# Altium schematic symbol library Master.SchLib: 262 symbols (part 1 of 2)
Pins are listed as number, name and electrical type; pins without a type are passive.

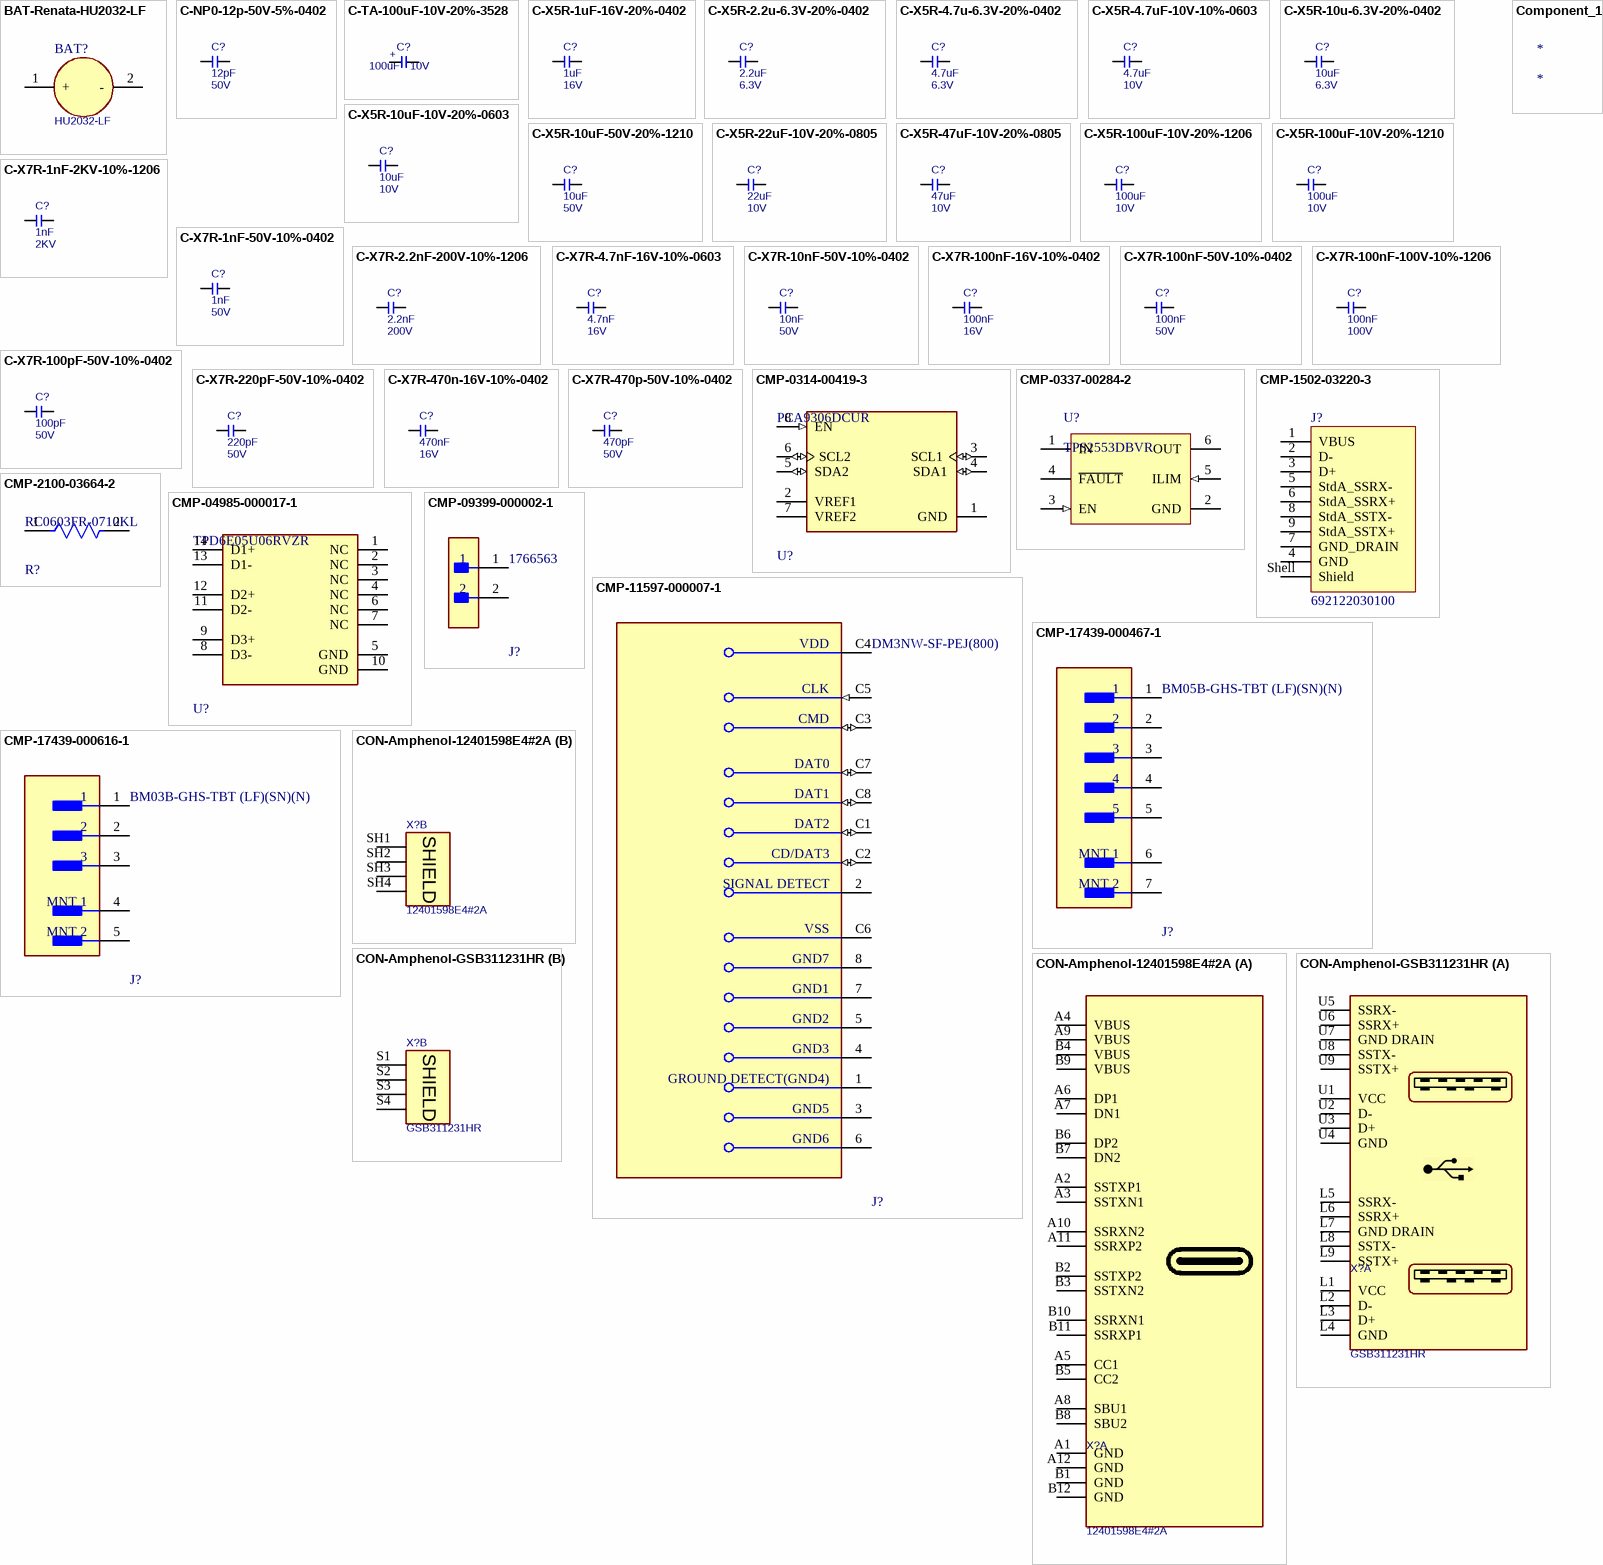
[diagram p0: symbols BAT-Renata-HU2032-LF to CON-Amphenol-GSB311231HR]

## BAT-Renata-HU2032-LF
designator BAT?, comment HU2032-LF
C2032 Battery Holder; Manufacturer Name: Renata; Manufacturer Part No.: HU2032-LF
footprint T_Renata_HU2032-LF (Battery Holder)
pins: 1 +, 2 -

## C-NP0-12p-50V-5%-0402
designator C?, comment Rating: 50V  (hidden comment: 12pF)
Capacitor Ceramic NP0  12pF 50V 5% 0402; Tolerance: 5%; Type: NP0; Value: 12pF
footprint CAPC1005X60N
pins: 1, 2

## C-TA-100uF-10V-20%-3528
designator C?, comment Rating: 10V  (hidden comment: 100uF)
Capacitor TA 100uF 10V 20% 3528; Tolerance: 20%; Type: TA; Value: 100uF
footprint CAPMP3528X210N
pins: 1, 2
text: +

## C-X5R-1uF-16V-20%-0402
designator C?, comment Rating: 16V  (hidden comment: 1uF)
Capacitor Ceramic X5R 1uF 16V 20% 0402; Tolerance: 20%; Type: X5R; Value: 1uF
footprint CAPC1005X60N
pins: 1, 2

## C-X5R-2.2u-6.3V-20%-0402
designator C?, comment Rating: 6.3V  (hidden comment: 2.2uF)
Capacitor Ceramic X5R 2.2uF 6.3V 20% 0402; Tolerance: 20%; Type: X5R; Value: 2.2uF
footprint CAPC1005X60N
pins: 1, 2

## C-X5R-4.7u-6.3V-20%-0402
designator C?, comment Rating: 6.3V  (hidden comment: 4.7uF)
Capacitor Ceramic X5R 4.7uF 6.3V 20% 0402; Tolerance: 20%; Type: X5R; Value: 4.7uF
footprint CAPC1005X60N
pins: 1, 2

## C-X5R-4.7uF-10V-10%-0603
designator C?, comment Rating: 10V  (hidden comment: 4.7uF)
Capacitor Ceramic X5R 4.7uF 10V 10% 0603; Tolerance: 10%; Type: X5R; Value: 4.7uF
footprint T_CAPC0603X33N
pins: 1, 2

## C-X5R-10u-6.3V-20%-0402
designator C?, comment Rating: 6.3V  (hidden comment: 10uF)
Capacitor Ceramic X5R 10uF 6.3V 20% 0402; Tolerance: 20%; Type: X5R; Value: 10uF
footprint CAPC1005X60N (Ceramic Capacitor 0402 (1005 metric), max height 0.5mm)
pins: 1, 2

## C-X5R-10uF-10V-20%-0603
designator C?, comment Rating: 10V  (hidden comment: 10uF)
Capacitor Ceramic X5R 10uF 10V 20% 0603; Tolerance: 20%; Type: X5R; Value: 10uF
footprint T_CAPC0603X33N
pins: 1, 2

## C-X5R-10uF-50V-20%-1210
designator C?, comment Rating: 50V  (hidden comment: 10uF)
Capacitor Ceramic X5R 10uF 50V 20% 1210; Tolerance: 20%; Type: X5R; Value: 10uF
footprint CAPC3225X160N
pins: 1, 2

## C-X5R-22uF-10V-20%-0805
designator C?, comment Rating: 10V  (hidden comment: 22uF)
Capacitor Ceramic X5R 22uF 10V 20% 0805; Tolerance: 20%; Type: X5R; Value: 22uF
footprint T_CAPC0805X125N
pins: 1, 2

## C-X5R-47uF-10V-20%-0805
designator C?, comment Rating: 10V  (hidden comment: 47uF)
Capacitor Ceramic X5R 47uF 10V 20% 0805; Tolerance: 20%; Type: X5R; Value: 47uF
footprint T_CAPC0805X125N
pins: 1, 2

## C-X5R-100uF-10V-20%-1206
designator C?, comment Rating: 10V  (hidden comment: 100uF)
Capacitor Ceramic X5R 100uF 10V 20% 1206; Tolerance: 20%; Type: X5R; Value: 100uF
footprint T_CAPC1206X60N
pins: 1, 2

## C-X5R-100uF-10V-20%-1210
designator C?, comment Rating: 10V  (hidden comment: 100uF)
Capacitor Ceramic X5R 100uF 10V 20% 1210; Tolerance: 20%; Type: X5R; Value: 100uF
footprint CAPC3225X160N
pins: 1, 2

## C-X7R-1nF-2KV-10%-1206
designator C?, comment Rating: 2KV  (hidden comment: 1nF)
Capacitor Ceramic X7R 1nF 2KV 10% 1206; Tolerance: 10%; Type: X7R; Value: 1nF
footprint T_CAPC1206X180N (Ceramic Capacitor 1206 (3216 metric), max height 1.8mm)
pins: 1, 2

## C-X7R-1nF-50V-10%-0402
designator C?, comment Rating: 50V  (hidden comment: 1nF)
Capacitor Ceramic X7R 1nF 50V 10% 0402; Tolerance: 10%; Type: X7R; Value: 1nF
footprint CAPC1005X60N
pins: 1, 2

## C-X7R-2.2nF-200V-10%-1206
designator C?, comment Rating: 200V  (hidden comment: 2.2nF)
Capacitor Ceramic X7R 2.2nF 200V 10% 1206; Tolerance: 10%; Type: X7R; Value: 2.2nF
footprint T_CAPC1206X180N (Ceramic Capacitor 1206 (3216 metric), max height 1.8mm)
pins: 1, 2

## C-X7R-4.7nF-16V-10%-0603
designator C?, comment Rating: 16V  (hidden comment: 4.7nF)
Capacitor Ceramic X7R 4.7nF 16V 10% 0603; Type: X7R; Tolerance: 10%; Value: 4.7nF
footprint T_CAPC0603X33N
pins: 1, 2

## C-X7R-10nF-50V-10%-0402
designator C?, comment Rating: 50V  (hidden comment: 10nF)
Capacitor Ceramic X7R 10nF 50V 10% 0402; Tolerance: 10%; Type: X7R; Value: 10nF
footprint CAPC1005X60N
pins: 1, 2

## C-X7R-100nF-16V-10%-0402
designator C?, comment Rating: 16V  (hidden comment: 100nF)
Capacitor Ceramic X7R 100nF 16V 10% 0402; Tolerance: 10%; Type: X7R; Value: 100nF
footprint CAPC1005X60N
pins: 1, 2

## C-X7R-100nF-50V-10%-0402
designator C?, comment Rating: 50V  (hidden comment: 100nF)
Capacitor Ceramic X7R 100nF 50V 10% 0402; Tolerance: 10%; Type: X7R; Value: 100nF
footprint CAPC1005X60N
pins: 1, 2

## C-X7R-100nF-100V-10%-1206
designator C?, comment Rating: 100V  (hidden comment: 100nF)
Capacitor Ceramic X7R 100nF 100V 10% 1206; Tolerance: 10%; Type: X7R; Value: 100nF
footprint T_CAPC1206X180N (Ceramic Capacitor 1206 (3216 metric), max height 1.8mm)
pins: 1, 2

## C-X7R-100pF-50V-10%-0402
designator C?, comment Rating: 50V  (hidden comment: 100pF)
Capacitor Ceramic X7R 100pF 50V 10% 0402; Tolerance: 10%; Type: X7R; Value: 100pF
footprint CAPC1005X60N
pins: 1, 2

## C-X7R-220pF-50V-10%-0402
designator C?, comment Rating: 50V  (hidden comment: 220pF)
Capacitor Ceramic X7R  220pF 50V 10% 0402; Tolerance: 10%; Type: X7R; Value: 220pF
footprint CAPC1005X60N
pins: 1, 2

## C-X7R-470n-16V-10%-0402
designator C?, comment Rating: 16V  (hidden comment: 470nF)
Capacitor Ceramic X7R 470nF 16V 10% 0402; Tolerance: 10%; Type: X7R; Value: 470nF
footprint CAPC1005X60N
pins: 1, 2

## C-X7R-470p-50V-10%-0402
designator C?, comment Rating: 50V  (hidden comment: 470pF)
Capacitor Ceramic X7R 470pF 50V 10% 0402; Tolerance: 10%; Type: X7R; Value: 470pF
footprint CAPC1005X60N
pins: 1, 2

## CMP-0314-00419-3
designator U?, comment PCA9306DCUR
IC TRNSLTR BIDIRECTIONAL 8VSSOP; Output Type: I2C; Max Supply Voltage: 5V; Number of Outputs: 2; Min Supply Voltage: 0uV; Logic Function: Translator; Turn-On Delay Time: 1.2ns; Output Current: 64mA; Propagation Delay: 1.4ns; Height: 0.85mm; Case/Package: VSSOP; Min Operating Temperature: -40°C; Weight: 0.000339oz; Packaging: Tape and Reel; Number of Pins: 8; Package Quantity: 1; Contact Plating: Gold; Termination: SMD/SMT; Max Operating Temperature: 85°C; Radiation Hardening: No; Number of Bits: 2; REACH SVHC: No SVHC; Lead Free: Lead Free; Number of Channels: 2; Length: 2.3mm; Number of Inputs: 2; Width: 2mm
footprint FP-DCU0008A-MFG
footprint FP-DCU0008A-IPC_C
footprint FP-DCU0008A-IPC_B
footprint FP-DCU0008A-IPC_A
pins: 1 GND (power), 2 VREF1 (power), 3 SCL1 (io), 4 SDA1 (io), 5 SDA2 (io), 6 SCL2 (io), 7 VREF2 (power), 8 EN (in)

## CMP-0337-00284-2
designator U?, comment TPS2553DBVR
Adjustable, Active High, Constant-Current, Current-Limited Power-Distribution Switch, 0.075 to 1.7 A Current Limit, -40 to 85 degC, 6-pin SOT-23 (DBV), Green (RoHS & no Sb/Br); Manufacturer: Texas Instruments; Continuous Current(Max)(A): 1.5; Vin(Min)(V): 2.5; Current Limit Accuracy @ 1A: +/-7.5% (925mA min / 1075mA max); Vin(Max)(V): 6.5; Rating: Catalog; rDS(on) per FET(Typ)(mOhms): 100/DRV, 85/DBV; Number of Switches: 1; ComponentLink1Description: Datasheet; PartNumber: TPS2553DBVR; Enable: Active High; PackageDescription: 6-Pin Plastic Small-Outline Package, 2.9 x 1.6 mm Body, 0.95 mm Pitch, 2.8 mm Lead Span; DatasheetVersion: SLVS841E; Code_JEDEC: MO-178-AB*; Current Limit Topology: Constant-Current; Mounting Technology: Surface Mount; Eco-Plan: Green (RoHS & no Sb/Br); PackageVersion: revK, Mar-2006; PackageReference: DBV0006A; ComponentLink1URL: http://www.ti.com/general/docs/lit/getliterature.tsp?genericPartNumber=TPS2553&fileType=pdf; Current Limit(A): 0.075 to 1.7
footprint DBV0006A_N (SOT23, 6-Leads, Body 3.05x1.75mm, Pitch 0.95mm, IPC Medium Density)
footprint DBV0006A_M (SOT23, 6-Leads, Body 3.05x1.75mm, Pitch 0.95mm, IPC Low Density)
footprint DBV0006A_L (SOT23, 6-Leads, Body 3.05x1.75mm, Pitch 0.95mm, IPC High Density)
pins: 1 IN (power) "Input voltage; connect a 0.1 uF or greater ceramic capacitor from IN to GND as close to the IC as possible.", 2 GND (power) "Ground connection; connect externally to PowerPAD", 3 EN (in) "Enable input, logic low turns on power switch", 4 ~{FAULT} (hiz) "Active-low open-drain output, asserted during overcurrent, overtemperature, or reverse-voltage conditions.", 5 ILIM (in) "External resistor used to set current-limit threshold; recommended 15 k ohm =< RILIM =< 232k ohm.", 6 OUT (power) "Power-switch output"

## CMP-1502-03220-3
designator J?, comment 692122030100
Conn USB 3.0 Type A RCP 9 POS 1.25mm Solder RA SMD 9 Terminal 1 Port T/R; Current Rating: 250mA; Insulation Resistance: 100MΩ; Number of Contacts: 9; Number of Ports: 1; Voltage Rating (AC): 30V; USB Standard: USB 3.0; Gender: Receptacle; Contact Resistance: 50mΩ; RoHS: Compliant; Min Operating Temperature: -20°C; Packaging: Tape and Reel; Width: 16.66mm; Contact Plating: Gold; Color: Blue; Height: 8.01mm; Mount: Horizontal, Surface Mount, Through Hole; Voltage Rating: 30V; Contact Material: Gold, Nickel; Connector Type: USB; REACH SVHC: Unknown; Number of Pins: 9; Max Operating Temperature: 85°C; Operating Supply Voltage: 30V; Lead Free: Lead Free; Termination: SMD/SMT; Orientation: Horizontal; Flammability Rating: UL94 V-0; Features: Shielded; Length: 15.1mm
footprint 692122030100 (USB 3.0 Type A Horizontal SMD)
pins: 1 VBUS, 2 D-, 3 D+, 4 GND, 5 StdA_SSRX-, 6 StdA_SSRX+, 7 GND_DRAIN, 8 StdA_SSTX-, 9 StdA_SSTX+, Shell Shield

## CMP-2100-03664-2
designator R?, comment RC0603FR-0710KL
RES 10K OHM 1% 1/10W 0603; Voltage Rating: 75V; Voltage Rating (DC): 50V; Resistance: 10kR; Power Rating: 100mW; Temperature Coefficient: 100ppm/°C; Depth: 0.8mm; Termination: SMD/SMT; Resistor Type: Thick Film; Series: RC; Construction: Rectangular; Features: Moisture Resistant; Packaging: Tape and Reel; Min Operating Temperature: -55°C; Number of Terminations: 2; Lead Pitch: 0.3mm; RoHS Compliant: Yes; Case/Package: 0603; Resistance Tolerance: 1%; Military Standard: Not; Weight: 7.1E-05oz; Number of Pins: 2; Tolerance: 1%; Length: 1.6mm; Case Code (Imperial): 0603; Lead Free: Lead Free; Width: 0.8mm; Max Power Dissipation: 100mW; Height: 0.45mm; Max Operating Temperature: 155°C; Case Code (Metric): 1608; Size Code: 0603
footprint FP-RC0603-0_55-IPC_B
footprint FP-RC0603-0_55-MFG
footprint FP-RC0603-0_55-IPC_A
footprint FP-RC0603-0_55-IPC_C
pins: 1, 2

## CMP-04985-000017-1
designator U?, comment TPD6E05U06RVZR
TVS DIODE 5.5V 14V 14USON; Number of Channels: 6; Peak Pulse Current: 2.5A; Polarity: Bidirectional; Interface: LVDS; Leakage Current: 10nA; Direction: Unidirectional; Power Line Protection: Yes; Breakdown Voltage: 6V; Max Power Dissipation: 40W; Min Operating Temperature: -40°C; Working Voltage: 5.5V; Number of Pins: 14; Termination: SMD/SMT; Number of Bidirectional Channels: 6; Reverse Standoff Voltage: 5.5V; Package Quantity: 3000; Mount: Surface Mount; Max Operating Temperature: 125°C; Radiation Hardening: No; Length: 3.6mm; RoHS Compliant: Yes; Lead Free: Lead Free; Packaging: Tape and Reel; Min Breakdown Voltage: 6V; Clamping Voltage: 14V; Peak Pulse Power: 40W; Depth: 1.45mm
footprint FP-RVZ0014A-IPC_A
footprint FP-RVZ0014A-MFG
footprint FP-RVZ0014A-IPC_B
footprint FP-RVZ0014A-IPC_C
pins: 1 NC, 2 NC, 3 NC, 4 NC, 5 GND (power), 6 NC, 7 NC, 8 D3-, 9 D3+, 10 GND (power), 11 D2-, 12 D2+, 13 D1-, 14 D1+

## CMP-09399-000002-1
designator J?, comment 1766563
TERM BLOCK HDR 2POS VERT 7.62MM; Manufacturer: Phoenix Contact; Conn Gender: Male; Number Of Contacts: 2; Conn Orientation: Straight; Voltage Rating: 630V; Current Rating: 12A; Package: 1766563; Device Class L3: unset; Pitch: 7.62mm; Contact Material: Tin; Height: 12.15mm; Digikey Description: TERM BLOCK HDR 2POS VERT 7.62MM; RoHS: TRUE; Category: Conn; Octopart: https://octopart.com/1766563-phoenix+contact-859397; Lead Free: Yes; Number Of Rows: 1; Footprint Url: https://www.phoenixcontact.com/online/portal/us/pxc/product_detail_page/!ut/p/z1/3Vffc6IwEP5X7INvjVkCBLyZe8AftfaqtVVb4YUJIdrcCVhAbfvXX1B753hz-tBx5g4mA0l299vsJl9mwR6eYC9mKzljuUxiNldj16P-qDFqtweEanf3ZgO6LbPZvjUetOs-wY_Yw17OAuxqRW8ug5Slb9hdZiIuJhYyVCKLUpPqxTiZDprNb9gdIE1DQNR7AyDzucDulRAhyp_TZDl7rjwLFoq0giqd3nDUeKyQS7MKFYI6yLqkRM1_oD4dXaOjHBwPYWsPf3kcOGXvKnvLJx0NtGtD68GtZcE9uXIIaQ2cEWh4uElEOJ2zeLZkMxXoZiLJZJHl7SgVXMiVSHcyzn8c5ujP1KZJuOQFxEi85lvD3zuh_EVJ-OHrYBd2pi2RMznPurmIunsKJwLSSxZQB8oWEClbQGXjUKdsHLLLxiG7bByyy8ahu9IdubJdCnf0vwtIKSxTid3FK0cJR1KJw43mF4Xz9UPrBnsyiGprHtWgplRrO1B_q-svikifGtgdayKerVWF6R0tIh1tp3CkCB2K2B8P_cGkOR4ez3vrgeKnlRRrPI6TNFJV_HYXeJGJEGwQBliIhcREhkUEYlDnKIC6YQvDmBIw8TWc8mB-0sMJeOus8NZ54fvnTc6VcV74z67-5uhRvzWKf0r5_eXFc7DHkzgvCDwpiF2FtQiqEDGpujtGZVWYyyzfMEr1FzzwlU0seJ6kmb_4dUtUIeSmbTFqocA0ABmUUsQIGEgInQR0aml63caLKLL1oqHx5H0kgve9ZoO-E26b3--bq_32Dxr0kVfvok4zsHtt3ZxF_sEncy4ufgLJYhWE/p0/IZ7_2G101H41M0L770Q2FA22DPAT82=CZ6_TBTEEP261OQ5B0ID5CEL4R1HN2=LA0=EdownloadId!4187324=action!downloadFile==/#Z7_2G1; Device Class L1: Connectors; Automotive: No; ComponentLink2Description: Datasheet; ComponentLink2URL: https://www.phoenixcontact.com/pxc-oc-itemdetail-pdf-web/eshop?lineItemType=LineItem&UID=1766563; Device Class L2: Headers and Wire Housings; Manufacturer Part Number: 1766563; Mouser Description: Pluggable Terminal Blocks 2 Pos 7.62mm pitch Through Hole Header
footprint FP-1766563-MFG
pins: 1, 2

## CMP-11597-000007-1
designator J?, comment DM3NW-SF-PEJ(800)
CONN MICROSD CARD PUSH-PUSH SMD; RoHS Compliant: Yes
footprint FP-DM3NW-SF-PEJ_800-MFG
pins: 1 GROUND DETECT(GND4) (power), 2 SIGNAL DETECT (power), 3 GND5 (power), 4 GND3 (power), 5 GND2 (power), 6 GND6 (power), 7 GND1 (power), 8 GND7 (power), C1 DAT2 (io), C2 CD/DAT3 (io), C3 CMD (io), C4 VDD (power), C5 CLK (in), C6 VSS (power), C7 DAT0 (io), C8 DAT1 (io)

## CMP-17439-000467-1
designator J?, comment BM05B-GHS-TBT (LF)(SN)(N)
CONN HEADER SMD 5POS 1.25MM; Pitch: 0.049inch; Number of Positions: 5; Mated Stacking Heights: 7.3mm; Voltage Rating: 50V; Contact Material: Bronze; Number of Pins: 5; Contact Type: Outer Shroud Contact; Lead Free: Lead Free; Insulation Material: Nylon; Flammability Rating: UL94 V-0; Min Operating Temperature: -25°C; Series: GH; Mount: Surface Mount; Number of Rows: 1; Color: Natural; Packaging: Cut Tape; Contact Shape: Rectangular; Contact Plating: Tin; Contact Finish - Mating: TIN; Connector Type: Header; Insulation Color: Natural; Fastening Type: Ramp; Termination: Solder; Max Operating Temperature: 85°C
footprint FP-BM05B-GHS-TBT_LF_SN-MFG
pins: 1, 2, 3, 4, 5, 6 MNT 1, 7 MNT 2

## CMP-17439-000616-1
designator J?, comment BM03B-GHS-TBT (LF)(SN)(N)
CONN HEADER SMD 3POS 1.25MM; Mated Stacking Heights: 7.3mm; Voltage Rating: 50V; Pitch: 0.049inch; Number of Positions: 3; Contact Material: Bronze; Number of Rows: 1; Packaging: Cut Tape; Fastening Type: Ramp; Contact Shape: Rectangular; Termination: Solder; Flammability Rating: UL94 V-0; Lead Free: Lead Free; Color: Natural; Mount: Surface Mount; Contact Finish - Mating: TIN; Max Operating Temperature: 85°C; Series: GH; Insulation Color: Natural; Connector Type: Header; Insulation Material: Nylon; Contact Type: Outer Shroud Contact; Min Operating Temperature: -25°C; Contact Plating: Tin
footprint FP-BM03B-GHS-TBT_LF_SN-MFG
pins: 1, 2, 3, 4 MNT 1, 5 MNT 2

## Component_1
designator *

## CON-Amphenol-12401598E4#2A
designator X?, comment 12401598E4#2A
USB 3.1 Gen 2, Input Output Connectors, USB type C, Receptacle, Top mount, dual-row SMT, 1.6mmPCB; Manufacturer Name: Amphenol; No. of ways: 24; Manufacturer Part No.: 12401598E4#2A
footprint CON-AMPHENOL-12401598E4#2A (USB 3.1 Gen 2, Input Output Connectors, USB type C, Receptacle, Top mount, dual-row SMT, 1.6mmPCB)
part A pins: A1 GND, A2 SSTXP1, A3 SSTXN1, A4 VBUS, A5 CC1, A6 DP1, A7 DN1, A8 SBU1, A9 VBUS, A10 SSRXN2, A11 SSRXP2, A12 GND, B1 GND, B2 SSTXP2, B3 SSTXN2, B4 VBUS, B5 CC2, B6 DP2, B7 DN2, B8 SBU2, B9 VBUS, B10 SSRXN1, B11 SSRXP1, B12 GND
part B pins: SH1 SHIELD, SH2 SHIELD, SH3 SHIELD, SH4 SHIELD

## CON-Amphenol-GSB311231HR
designator X?, comment GSB311231HR
USB 3.0 double row, Type A; Manufacturer Name: Amphenol; No. of ways: 18; Manufacturer Part No.: GSB311231HR
footprint T_AMPHENOL_ GSB311231HR (USB 3.0 double row, Type A)
part A pins: L1 VCC (power), L2 D-, L3 D+, L4 GND (power), L5 SSRX- (power), L6 SSRX+ (power), L7 GND DRAIN (power), L8 SSTX- (power), L9 SSTX+ (power), U1 VCC (power), U2 D-, U3 D+, U4 GND (power), U5 SSRX- (power), U6 SSRX+ (power), U7 GND DRAIN (power), U8 SSTX- (power), U9 SSTX+ (power)
part B pins: S1 SHIELD, S2 SHIELD, S3 SHIELD, S4 SHIELD

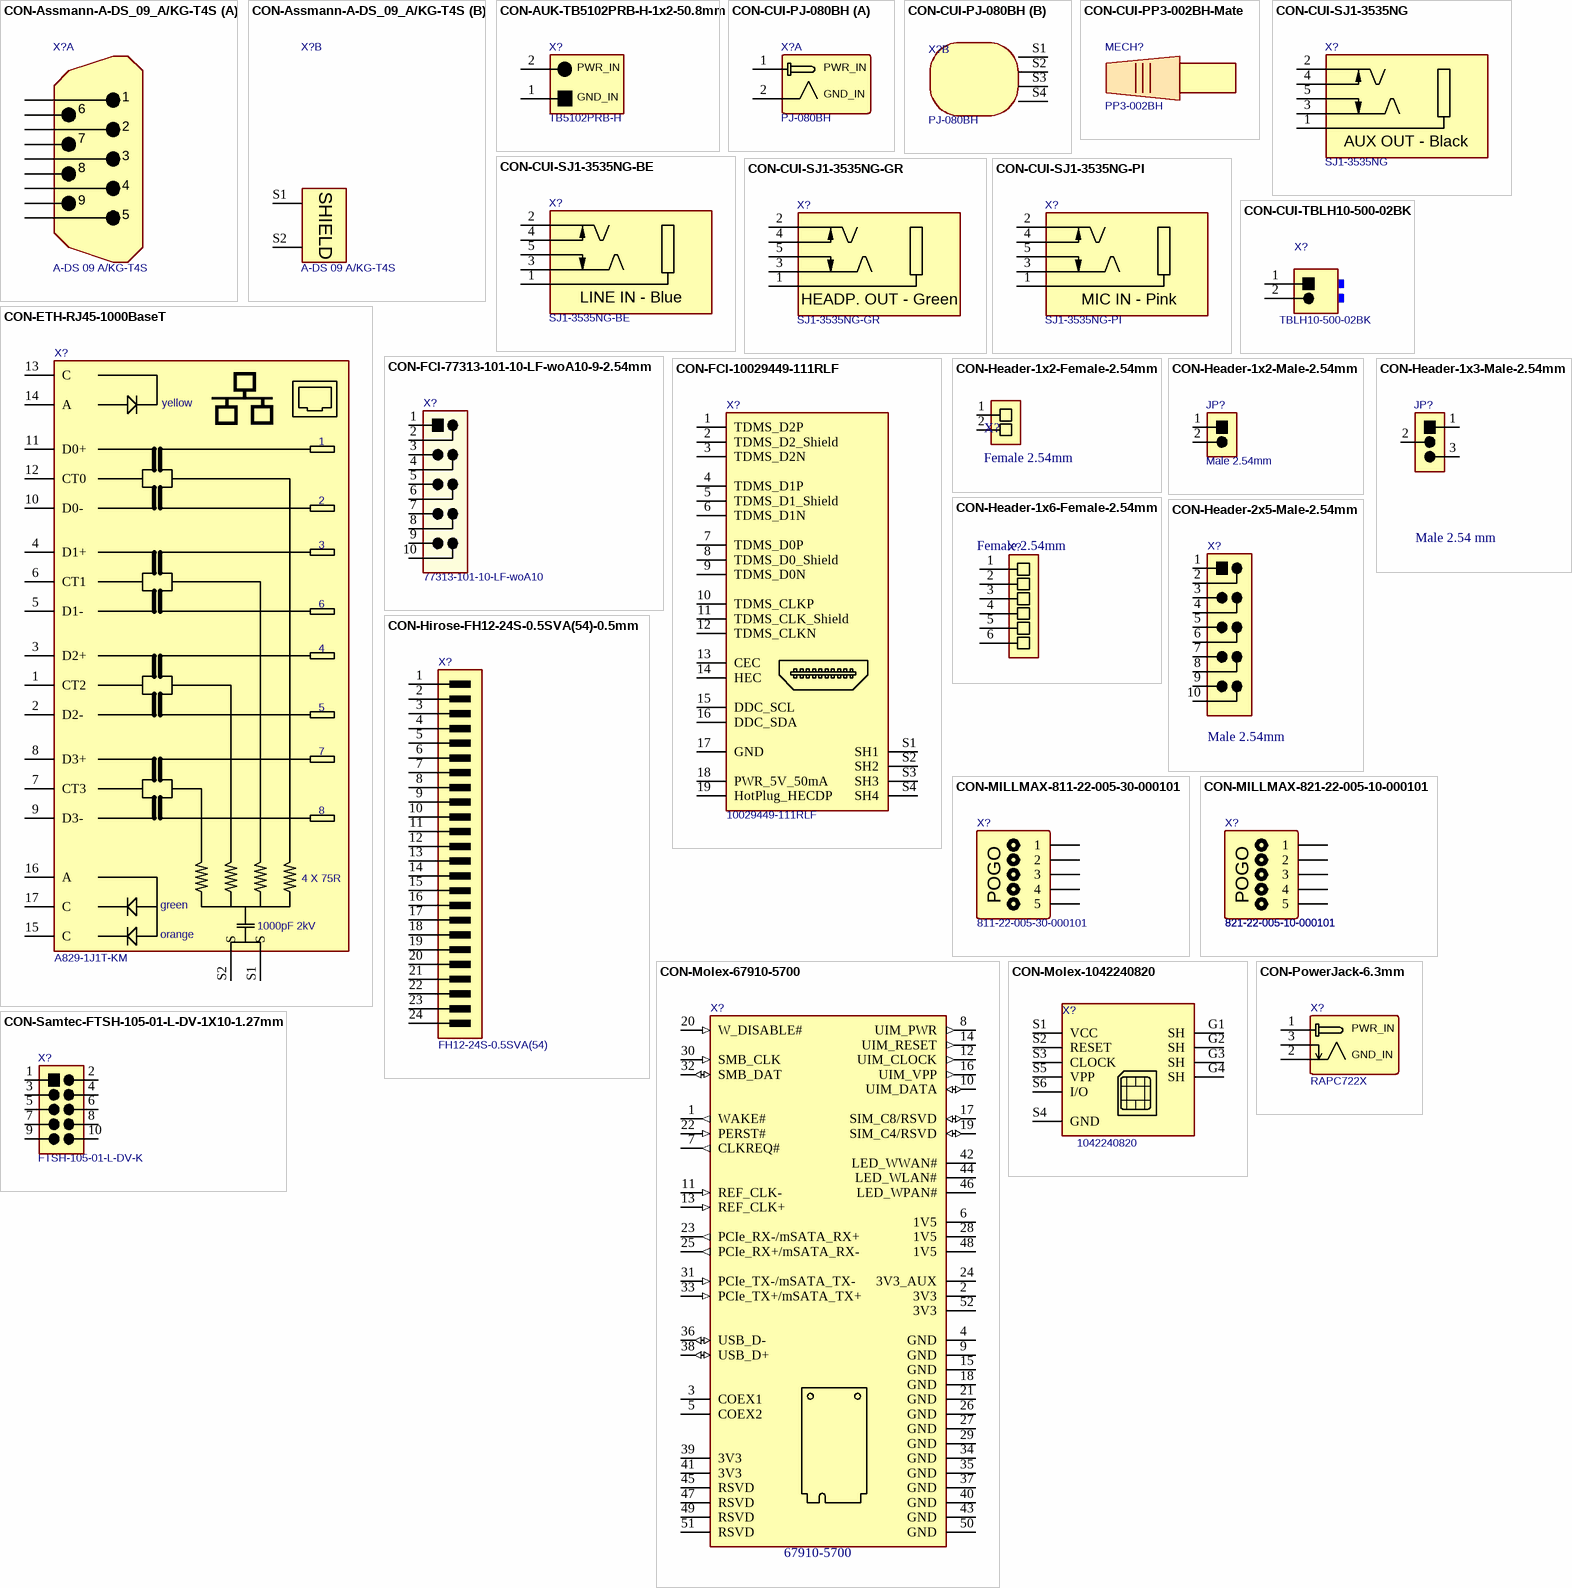
[diagram p1: symbols CON-Assmann-A-DS_09_A/KG-T4S to CON-Samtec-FTSH-105-01-L-DV-1X10-1.27mm]

## CON-Assmann-A-DS_09_A/KG-T4S
designator X?, comment A-DS 09 A/KG-T4S
DSUB-9, RS232 Connector, Male; Manufacturer Name: Assmann; No. of Ways: 9; Temperature Range: -55°C to 105°C; Manufacturer Part No.: A-DS 09 A/KG-T4S
footprint CON-DSUB9-Assmann-A-DS_09_A/KG-T4S (DSUB-9 Male, Right Angled Connector)
part A pins: 1 DCD, 2 RXD, 3 TXD, 4 DTR, 5 GND, 6 DSR, 7 RTS, 8 CTS, 9 RI
part B pins: S1 SHIELD, S2 SHIELD

## CON-AUK-TB5102PRB-H-1x2-50.8mm
designator X?, comment TB5102PRB-H
Power Connector; Manufacturer Name: AUK; No. of ways: 1x2; Pitch: 5.08mm; Manufacturer Part No.: TB5102PRB-H
footprint T_AUK_TB5102PRB-H (Power Connector 5.08mm pitch)
pins: 1 GND_IN, 2 PWR_IN

## CON-CUI-PJ-080BH
designator X?, comment PJ-080BH
Power Jack; Manufacturer Name: CUI; Manufacturer Part No.: PJ-080BH
footprint CON-CUI-PJ-080BH (DC Power Connector, 2.5mm (Dia), 6.4mm(Dia), Round Power Socket, TH Type)
part A pins: 1 GND_IN, 2 PWR_IN
part B pins: S1 SHIELD, S2 SHIELD, S3 SHIELD, S4 SHIELD

## CON-CUI-PP3-002BH-Mate
designator MECH?, comment PP3-002BH  (mechanical)
Power Barrel Connector Plug 2.50mm ID , 5.50mm OD; Manufacturer Name: CUI; Manufacturer Part No.: PP3-002BH

## CON-CUI-SJ1-3535NG
designator X?, comment SJ1-3535NG
Audiojack stereo, 3.5mm, black; Manufacturer Name: CUI; No. of ways: 5; Manufacturer Part No.: SJ1-3535NG
footprint CON-CUI-SJ1-3535NG
pins: 1, 2, 3, 4, 5
text: AUX OUT - Black

## CON-CUI-SJ1-3535NG-BE
designator X?, comment SJ1-3535NG-BE
Audiojack stereo, 3.5mm, blue; Manufacturer Name: CUI; No. of ways: 5; Manufacturer Part No.: SJ1-3535NG-BE
footprint CON-CUI-SJ1-3535NG-BE (Audio Jack Connector,Blue, 3.5mm (Dia), TH Type)
pins: 1, 2, 3, 4, 5
text: LINE IN - Blue

## CON-CUI-SJ1-3535NG-GR
designator X?, comment SJ1-3535NG-GR
Audiojack stereo, 3.5mm, green; Manufacturer Name: CUI; No. of ways: 5; Manufacturer Part No.: SJ1-3535NG-GR
footprint CON-CUI-SJ1-3535NG-GR (Audio Jack Connector, Green, 3.5mm (Dia), TH Type)
pins: 1, 2, 3, 4, 5
text: HEADP. OUT - Green

## CON-CUI-SJ1-3535NG-PI
designator X?, comment SJ1-3535NG-PI
Audiojack stereo, 3.5mm, pink; Manufacturer Name: CUI; No. of ways: 5; Manufacturer Part No.: SJ1-3535NG-PI
footprint CON-CUI-SJ1-3535NG-PI (Audio Jack Connector, Pink, 3.5mm (Dia), TH Type)
pins: 1, 2, 3, 4, 5
text: MIC IN - Pink

## CON-CUI-TBLH10-500-02BK
designator X?, comment TBLH10-500-02BK
2-pin terminal block; Manufacturer Name: CUI; No. of ways: 1X2; Pitch: 5mm; Manufacturer Part No.: TBLH10-500-02BK
footprint CON-CUI-TBLH10-500-02BK (TBLH10-500 TERMINAL BLOCK)
pins: 1, 2

## CON-ETH-RJ45-1000BaseT
designator X?, comment A829-1J1T-KM
RJ45 Ethernet Connector 1000BaseT Connector; Manufacturer Name: Bel Fuse; Temperature Range: *; Manufacturer Part No.: A829-1J1T-KM
footprint CON-BELFuse-A829-1J1T-KM (LOW PROFILE GIGABIT ETHERNET JACK WITH MAGS)
pins: 1 CT2, 2 D2-, 3 D2+, 4 D1+, 5 D1-, 6 CT1, 7 CT3, 8 D3+, 9 D3-, 10 D0-, 11 D0+, 12 CT0, 13 C, 14 A, 15 C, 16 A, 17 C, S1 S, S2 S
text: yellow; 4 X 75R; green; 1000pF 2kV; orange

## CON-FCI-77313-101-10-LF-woA10-9-2.54mm
designator X?, comment 77313-101-10-LF-woA10
RS232 Header; Manufacturer Name: FCI; No. of ways: 9; Manufacturer Part No.: 77313-101-10-LF-woA10
footprint T_FCI_77313-101-10-LF-woA10 (2.54 mm header)
pins: 1, 2, 3, 4, 5, 6, 7, 8, 9, 10

## CON-FCI-10029449-111RLF
designator X?, comment 10029449-111RLF
HDMI Connector Right Angle Vertical THT; Manufacturer Name: FCI; Manufacturer Part No.: 10029449-111RLF
footprint T_FCI_10029449-111RLF (CON RECPT HDMI THT R/A W/O FLNG)
pins: 1 TDMS_D2P, 2 TDMS_D2_Shield, 3 TDMS_D2N, 4 TDMS_D1P, 5 TDMS_D1_Shield, 6 TDMS_D1N, 7 TDMS_D0P, 8 TDMS_D0_Shield, 9 TDMS_D0N, 10 TDMS_CLKP, 11 TDMS_CLK_Shield, 12 TDMS_CLKN, 13 CEC, 14 HEC, 15 DDC_SCL, 16 DDC_SDA, 17 GND, 18 PWR_5V_50mA, 19 HotPlug_HECDP, S1 SH1, S2 SH2, S3 SH3, S4 SH4

## CON-Header-1x2-Female-2.54mm
designator X?, comment Female 2.54mm
Header female, 1x2 Pins, 2.54 mm pitch; Manufacturer Name: Samtec; Manufacturer Part no.: SSW-102-01-G-S; No. of ways: 1x2; Pitch: 2.54 mm
footprint CON-Header-1x2-Female-2.54mm (Receptacle, 1x2 Pins, 2.54 mm pitch)
pins: 1, 2

## CON-Header-1x2-Male-2.54mm
designator JP?, comment Male 2.54mm
Header male, 1x2 Pins, 2.54 mm pitch; Manufacturer Name: FCI; Manufacturer Part no.: 68000-202HLF; No. of ways: 1x2; Pitch: 2.54 mm
footprint CON-Header-1x2-Male-2.54mm
pins: 1, 2

## CON-Header-1x3-Male-2.54mm
designator JP?, comment Male 2.54 mm
Header male, 1x3 Pins, 2.54 mm pitch; Manufacturer Name: FCI; Manufacturer Part No.: 68000-203HLF; Pitch: 2.54mm; No. of ways: 1X3
footprint CON-Header-1x3-Male-2.54mm
pins: 1, 2, 3

## CON-Header-1x6-Female-2.54mm
designator X?, comment Female 2.54mm
Receptacle Female Socket, 1x6 Pins, 2.54mm pitch; Manufacturer Name: JVE; Manufacturer Part No.: 22B8561-06S10B-01G; No. of ways: 1x6; Pitch: 2.54mm
footprint CON-Header-1x6-Female-2.54mm
pins: 1, 2, 3, 4, 5, 6

## CON-Header-2x5-Male-2.54mm
designator X?, comment Male 2.54mm
Header Male, 2x5 Pins, 2.54mm pitch; Manufacturer Name: FCI; Manufacturer Part No.: 77313-101-10LF; No. of ways: 10
footprint CON-Header-2x5-Male-2.54mm (2.54 mm header)
pins: 1, 2, 3, 4, 5, 6, 7, 8, 9, 10

## CON-Hirose-FH12-24S-0.5SVA(54)-0.5mm
designator X?, comment FH12-24S-0.5SVA(54)
0.50mm Pitch FFC/FPC Vertical DVI Connector; Manufacturer Name: Hirose; No. of ways: 24; Pitch: 0.5mm; Manufacturer Part No.: FH12-24S-0.5SVA(54)
footprint T_Hirose_FH12-24S-0.5SVA(54) (FFC Connector 0.5mm pitch Vertical)
pins: 1 GND, 2 TMDS_CLK_P, 3 TMDS_CLK_N, 4 GND, 5 TMDS_DATA0_P, 6 TMDS_DATA0_N, 7 GND, 8 TMDS_DATA1_P, 9 TMDS_DATA1_N, 10 GND, 11 TMDS_DATA2_P, 12 TMDS_DATA2_N, 13 VDD, 14 HOTPLUG_DETECT, 15 DDC_CLK, 16 DDC_DATA, 17 GND, 18 CRT_RED, 19 GND, 20 CRT_GREEN, 21 GND, 22 CRT_BLUE, 23 CRT_VSYNC, 24 CRT_HSYNC

## CON-MILLMAX-811-22-005-30-000101
designator X?, comment 811-22-005-30-000101
Pogo pins; Manufacturer Name: Mill-Max; Manufacturer Part No.: 811-22-005-30-000101
footprint CON-MILLMAX-811-22-005-30-000101
pins: 1, 2, 3, 4, 5
text: POGO

## CON-MILLMAX-821-22-005-10-000101
designator X?, comment 821-22-005-10-000101
Pogo pins; Manufacturer Name: Mill-Max; Manufacturer Part No.: 821-22-005-10-000101
footprint CON-MILLMAX-821-22-005-10-000101 (SPRING LOADED CONNECTOR, 5Pin, 2.54mm PITCH, 0.991mm STROKE)
pins: 1, 2, 3, 4, 5
text: POGO

## CON-Molex-67910-5700
designator X?, comment 67910-5700
PCIe_Mini Card Holder; Manufacturer Name: Molex; Manufacturer Part No.: 67910-5700
footprint CON-Molex-67910-5700-Full (Molex PCIe mini card connector with clip)
footprint CON-Molex-67910-5700-Half/Full (Molex PCIe mini card connector with clip)
pins: 1 WAKE# (out), 2 3V3 (power), 3 COEX1, 4 GND (power), 5 COEX2, 6 1V5 (power), 7 CLKREQ# (out), 8 UIM_PWR (out), 9 GND (power), 10 UIM_DATA (io), 11 REF_CLK- (in), 12 UIM_CLOCK (out), 13 REF_CLK+ (in), 14 UIM_RESET (out), 15 GND (power), 16 UIM_VPP (out), 17 SIM_C8/RSVD (io), 18 GND (power), 19 SIM_C4/RSVD (io), 20 W_DISABLE# (in), 21 GND (power), 22 PERST# (in), 23 PCIe_RX-/mSATA_RX+ (out), 24 3V3_AUX (power), 25 PCIe_RX+/mSATA_RX- (out), 26 GND (power), 27 GND (power), 28 1V5 (power), 29 GND (power), 30 SMB_CLK (in), 31 PCIe_TX-/mSATA_TX- (in), 32 SMB_DAT (io), 33 PCIe_TX+/mSATA_TX+ (in), 34 GND (power), 35 GND (power), 36 USB_D- (io), 37 GND (power), 38 USB_D+ (io), 39 3V3, 40 GND (power), 41 3V3, 42 LED_WWAN# (oc), 43 GND (power), 44 LED_WLAN# (oc), 45 RSVD, 46 LED_WPAN# (oc), 47 RSVD, 48 1V5 (power), 49 RSVD, 50 GND (power), 51 RSVD, 52 3V3 (power)

## CON-Molex-1042240820
designator X?, comment 1042240820
6 Contacts Nano Sim Card Holder; Manufacturer Name: Molex; Manufacturer Part No.: 1042240820
footprint T_Molex_1042240820
pins: G1 SH, G2 SH, G3 SH, G4 SH, S1 VCC, S2 RESET, S3 CLOCK, S4 GND, S5 VPP, S6 I/O

## CON-PowerJack-6.3mm
designator X?  Manufacturer Part No.: RAPC722X
Power Jack; Manufacturer Name: SwitchCraft
footprint T_RAPC722X (Connector, 2.1mm (Dia), 5.5mm(Dia), Round Power Socket)
pins: 1 GND_IN, 2 PWR_IN, 3 PWR_IN

## CON-Samtec-FTSH-105-01-L-DV-1X10-1.27mm
designator X?, comment FTSH-105-01-L-DV-K
Male Header, 10-Pin, 1.27mm Pitch; Manufacturer Name: Samtec; No. of ways: 1X10; Pitch: 1.27mm; Manufacturer Part No.: FTSH-105-01-L-DV-K
footprint T_Samtec_FTSH-105-01-L-DV (Header, 2x5 Pins, 1.27mm pitch, male)
pins: 1, 2, 3, 4, 5, 6, 7, 8, 9, 10

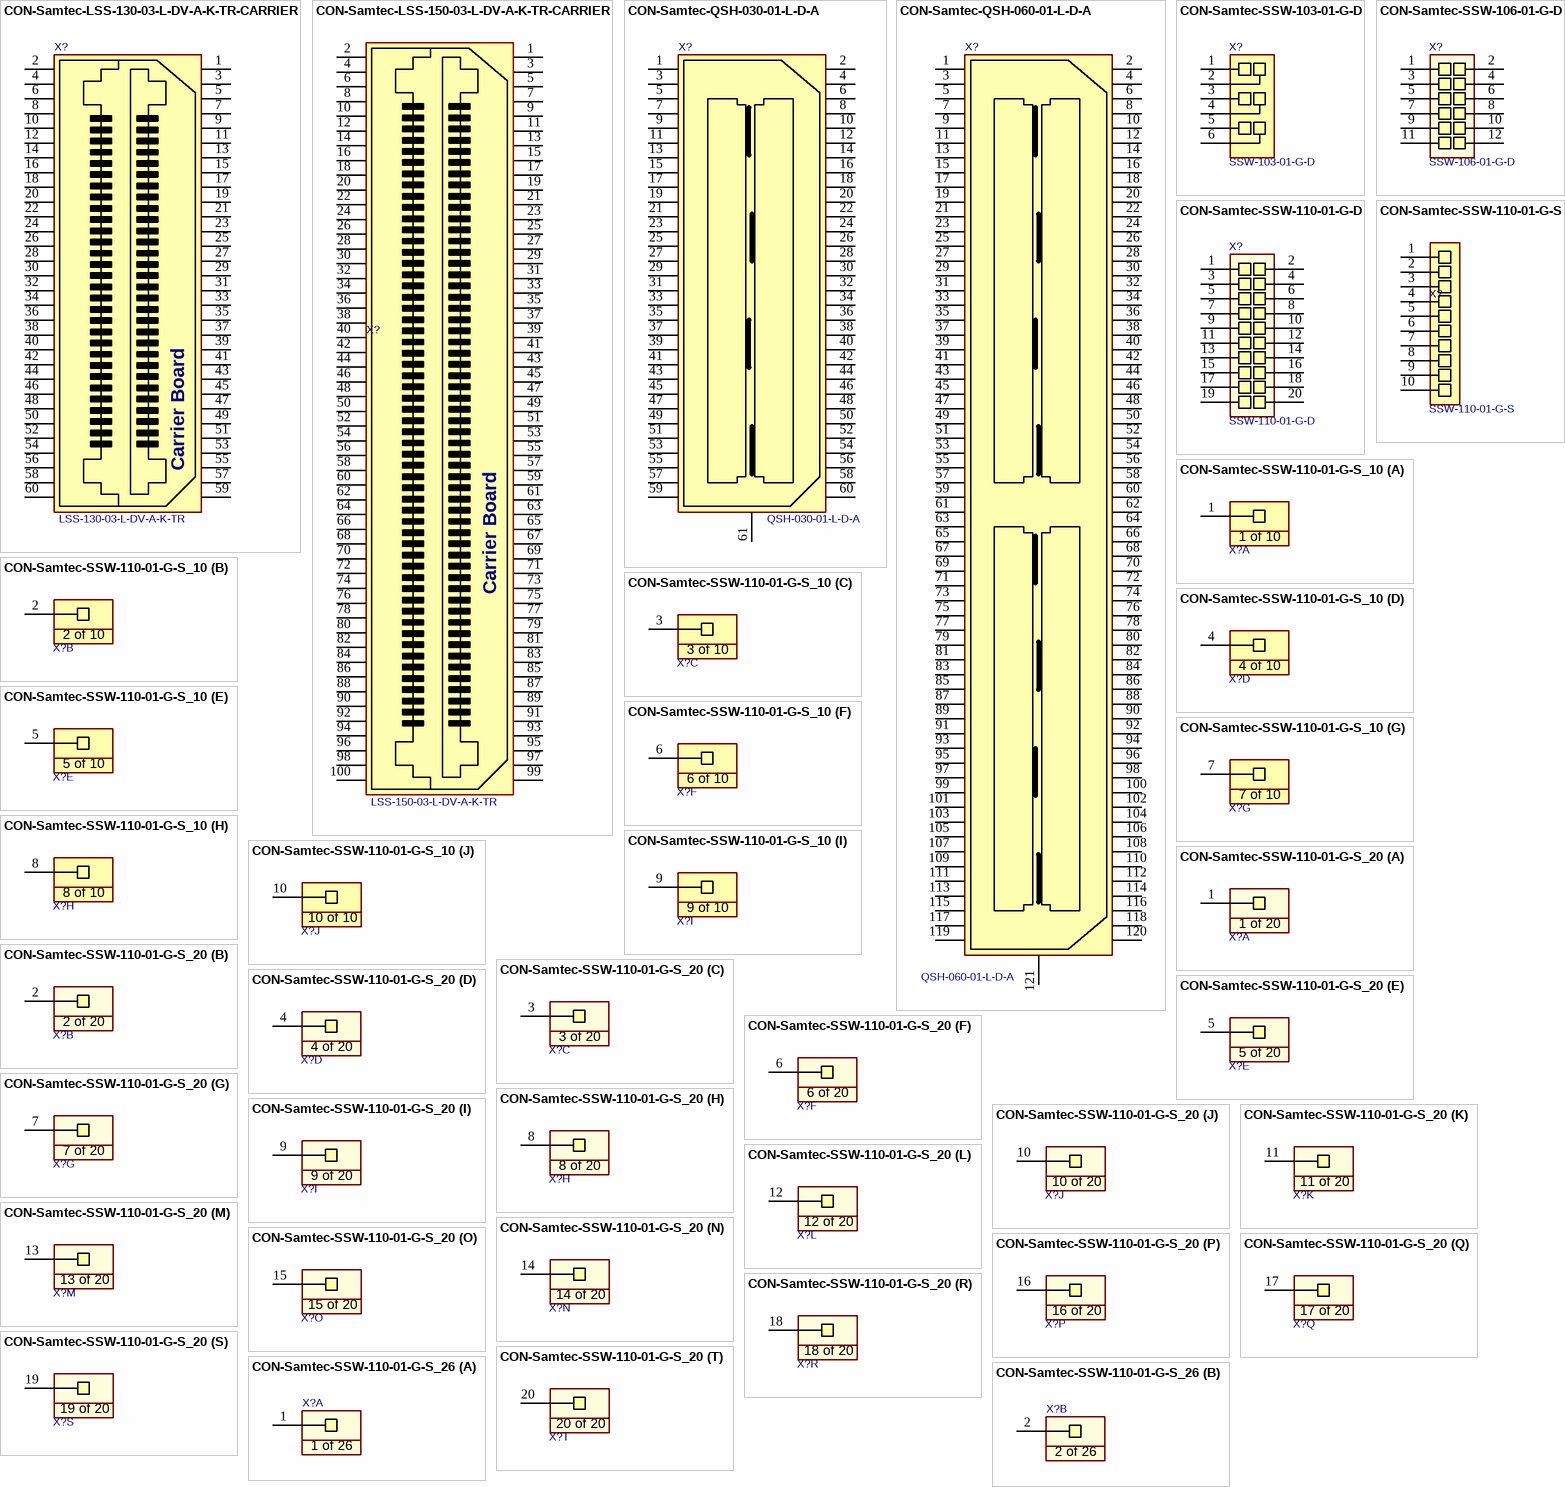
[diagram p2: symbols CON-Samtec-LSS-130-03-L-DV-A-K-TR-CARRIER to CON-Samtec-SSW-110-01-G-S_26]

## CON-Samtec-LSS-130-03-L-DV-A-K-TR-CARRIER
designator X?, comment LSS-130-03-L-DV-A-K-TR
60 Position Connector, Self Mating, Non-Gendered, Surface Mount; Manufacturer Name: Samtec; Pitch: 0.635mm; No. of ways: 60; Manufacturer Part No.: LSS-130-03-L-DV-A-K-TR
footprint CON-SAMTEC-LSS-130-03-L-DV-A-CARRIER (0.635 mm Razor Beam High-Speed Hermaphroditic Terminal/Socket Strip)
pins: 1, 2, 3, 4, 5, 6, 7, 8, 9, 10, 11, 12, 13, 14, 15, 16, 17, 18, 19, 20, 21, 22, 23, 24, 25, 26, 27, 28, 29, 30, 31, 32, 33, 34, 35, 36, 37, 38, 39, 40, 41, 42, 43, 44, 45, 46, 47, 48, 49, 50, 51, 52, 53, 54, 55, 56, 57, 58, 59, 60
text: Carrier Board

## CON-Samtec-LSS-150-03-L-DV-A-K-TR-CARRIER
designator X?, comment LSS-150-03-L-DV-A-K-TR
100 Position Connector, Self Mating, Non-Gendered, Surface Mount; Manufacturer Name: Samtec; Pitch: 0.635mm; No. of ways: 100; Manufacturer Part No.: LSS-150-03-L-DV-A-K-TR
footprint CON-SAMTEC-LSS-150-03-L-DV-A-CARRIER (0.635 mm Razor Beam High-Speed Hermaphroditic Terminal/Socket Strip)
pins: 1, 2, 3, 4, 5, 6, 7, 8, 9, 10, 11, 12, 13, 14, 15, 16, 17, 18, 19, 20, 21, 22, 23, 24, 25, 26, 27, 28, 29, 30, 31, 32, 33, 34, 35, 36, 37, 38, 39, 40, 41, 42, 43, 44, 45, 46, 47, 48, 49, 50, 51, 52, 53, 54, 55, 56, 57, 58, 59, 60, 61, 62, 63, 64, 65, 66, 67, 68, 69, 70, 71, 72, 73, 74, 75, 76, 77, 78, 79, 80, 81, 82, 83, 84, 85, 86, 87, 88, 89, 90, 91, 92, 93, 94, 95, 96, 97, 98, 99, 100
text: Carrier Board

## CON-Samtec-QSH-030-01-L-D-A
designator X?, comment QSH-030-01-L-D-A
High Speed Ground Plane Socket; Manufacturer Name: Samtec; Pitch: 0.5mm; No. of ways: 60; Manufacturer Part No.: QSH-030-01-L-D-A
footprint CON-SAMTEC-QSH-030-01-L-D-A (High Speed Ground Plane Socket)
pins: 1, 2, 3, 4, 5, 6, 7, 8, 9, 10, 11, 12, 13, 14, 15, 16, 17, 18, 19, 20, 21, 22, 23, 24, 25, 26, 27, 28, 29, 30, 31, 32, 33, 34, 35, 36, 37, 38, 39, 40, 41, 42, 43, 44, 45, 46, 47, 48, 49, 50, 51, 52, 53, 54, 55, 56, 57, 58, 59, 60, 61 121

## CON-Samtec-QSH-060-01-L-D-A
designator X?, comment QSH-060-01-L-D-A
High Speed Ground Plane Socket; Manufacturer Name: Samtec; Pitch: 0.5mm; No. of ways: 120; Manufacturer Part No.: QSH-060-01-L-D-A
footprint CON-Samtech-QSH-060-01-L-D-A (High Speed Ground Plane Socket)
pins: 1, 2, 3, 4, 5, 6, 7, 8, 9, 10, 11, 12, 13, 14, 15, 16, 17, 18, 19, 20, 21, 22, 23, 24, 25, 26, 27, 28, 29, 30, 31, 32, 33, 34, 35, 36, 37, 38, 39, 40, 41, 42, 43, 44, 45, 46, 47, 48, 49, 50, 51, 52, 53, 54, 55, 56, 57, 58, 59, 60, 61, 62, 63, 64, 65, 66, 67, 68, 69, 70, 71, 72, 73, 74, 75, 76, 77, 78, 79, 80, 81, 82, 83, 84, 85, 86, 87, 88, 89, 90, 91, 92, 93, 94, 95, 96, 97, 98, 99, 100, 101, 102, 103, 104, 105, 106, 107, 108, 109, 110, 111, 112, 113, 114, 115, 116, 117, 118, 119, 120, 121

## CON-Samtec-SSW-103-01-G-D
designator X?, comment Manufacturer Part No.: SSW-103-01-G-D  (hidden comment: TSW-103-01-G-D)
Receptacle Female Socket, 2x3 Pins, 2.54mm pitch; Manufacturer Name: Samtec; No. of ways: 2x3; Pitch: 2.54mm
footprint T_Samtec_SSW-103-01-G-D (Receptacle Female Socket  2x3 Pins, 2.54 mm pitch)
pins: 1, 2, 3, 4, 5, 6

## CON-Samtec-SSW-106-01-G-D
designator X?, comment SSW-106-01-G-D
Header Female, 2x6 Pins, 2.54 mm pitch; Manufacturer Name: Samtec; Pitch: 2.54mm; No. of wasy: 2x6; Manufacturer Part No.: SSW-106-01-G-D
footprint T_Samtec_SSW-106-01-G-D (Header, 2x6 Pins, 2.54 mm pitch)
pins: 1, 2, 3, 4, 5, 6, 7, 8, 9, 10, 11, 12

## CON-Samtec-SSW-110-01-G-D
designator X?, comment SSW-110-01-G-D
Receptacle Female Socket 2x10 Pins, 2.54 mm pitch; Manufacturer Name: Samtec; Pitch: 2.54mm; No. of wasy: 2x10; Manufacturer Part No.: SSW-110-01-G-D
footprint T_Samtec_SSW-110-01-G-D (Receptacle Female Socket  2x10 Pins, 2.54 mm pitch)
pins: 1, 2, 3, 4, 5, 6, 7, 8, 9, 10, 11, 12, 13, 14, 15, 16, 17, 18, 19, 20

## CON-Samtec-SSW-110-01-G-S
designator X?, comment SSW-110-01-G-S
Receptacle Female Socket, 1x10 Pins, 2.54mm pitch; Manufacturer Name: Samtec; No. of ways: 1x10; Pitch: 2.54mm; Manufacturer Part No.: SSW-110-01-G-S
footprint T_Samtec_SSW-110-01-G-S
pins: 1, 2, 3, 4, 5, 6, 7, 8, 9, 10

## CON-Samtec-SSW-110-01-G-S_10
designator X?, comment SSW-110-01-G-S  (value not drawn)
Receptacle Female Socket 1x10 pin 2.54mm pitch; Manufacturer Name: Samtec; Pitch: 2.54mm; No. of ways: 1x10; Manufacturer Part No.: SSW-110-01-G-S
footprint T_Samtec_SSW-110-01-G-S_10 (Receptacle Female Socket 1x10 Pins, 2.54 mm pitch)
part A pins: 1
part B pins: 2
part C pins: 3
part D pins: 4
part E pins: 5
part F pins: 6
part G pins: 7
part H pins: 8
part I pins: 9
part J pins: 10
part A text: 1 of 10
part B text: 2 of 10
part C text: 3 of 10
part D text: 4 of 10
part E text: 5 of 10
part F text: 6 of 10
part G text: 7 of 10
part H text: 8 of 10
part I text: 9 of 10
part J text: 10 of 10

## CON-Samtec-SSW-110-01-G-S_20
designator X?, comment SSW-110-01-G-S  (value not drawn)
Receptacle Female Socket 1x20 pin 2.54mm pitch; Manufacturer Name: Samtec; Pitch: 2.54mm; No. of ways: 1x20; Manufacturer Part No.: SSW-110-01-G-S
footprint T_Samtec_SSW-110-01-G-S_20 (Receptacle Female Socket 1x20 Pins, 2.54 mm pitch)
part A pins: 1
part B pins: 2
part C pins: 3
part D pins: 4
part E pins: 5
part F pins: 6
part G pins: 7
part H pins: 8
part I pins: 9
part J pins: 10
part K pins: 11
part L pins: 12
part M pins: 13
part N pins: 14
part O pins: 15
part P pins: 16
part Q pins: 17
part R pins: 18
part S pins: 19
part T pins: 20
part A text: 1 of 20
part B text: 2 of 20
part C text: 3 of 20
part D text: 4 of 20
part E text: 5 of 20
part F text: 6 of 20
part G text: 7 of 20
part H text: 8 of 20
part I text: 9 of 20
part J text: 10 of 20
part K text: 11 of 20
part L text: 12 of 20
part M text: 13 of 20
part N text: 14 of 20
part O text: 15 of 20
part P text: 16 of 20
part Q text: 17 of 20
part R text: 18 of 20
part S text: 19 of 20
part T text: 20 of 20

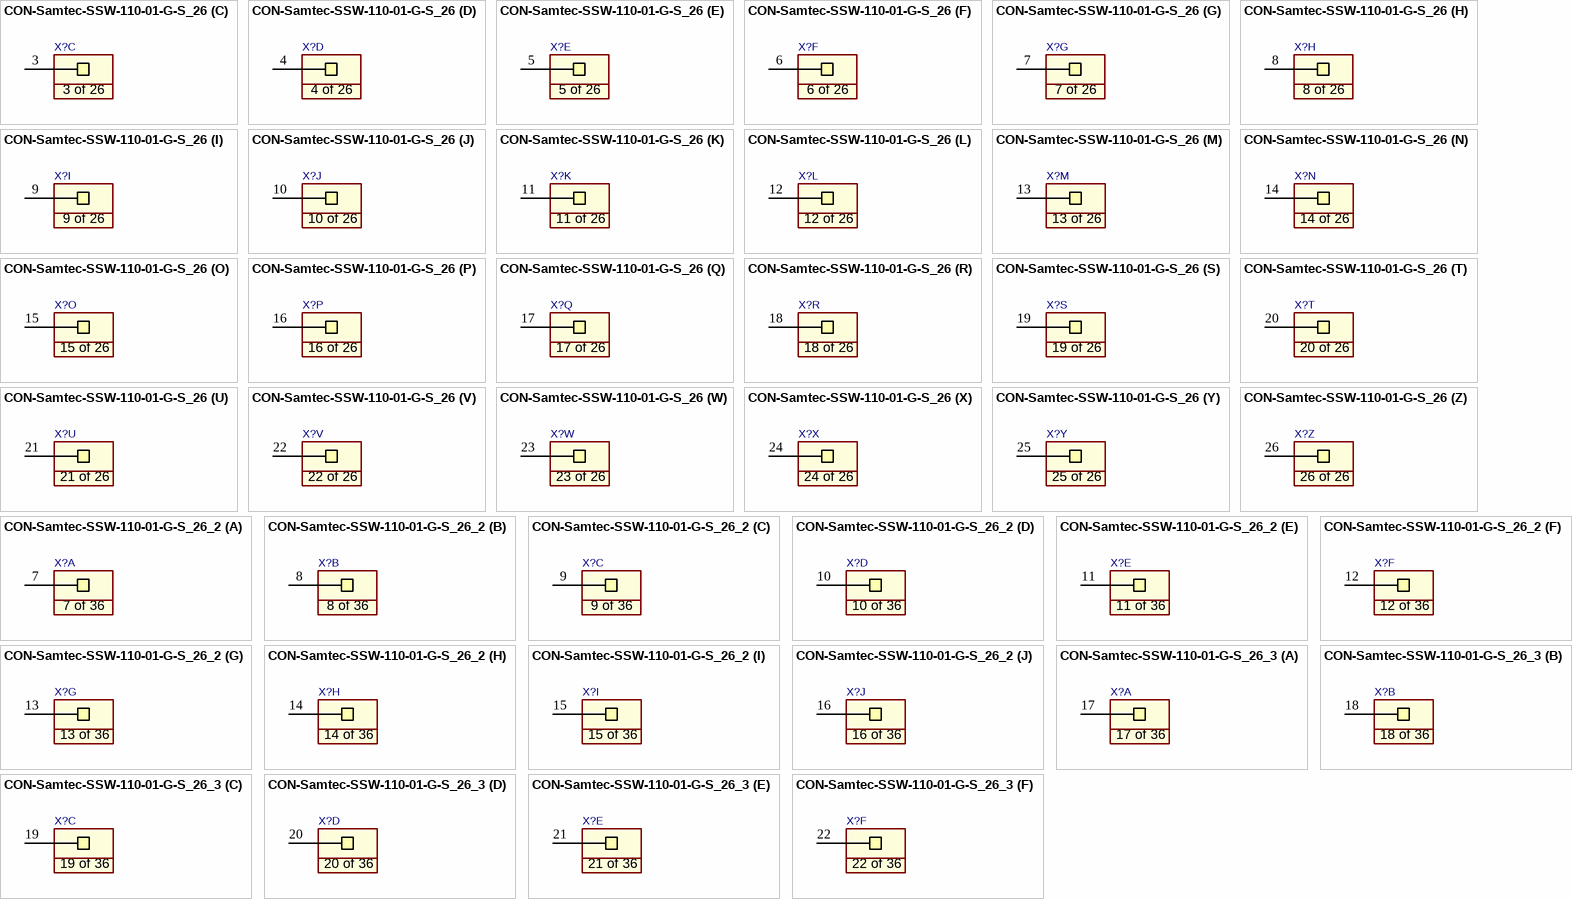
[diagram p3: symbols CON-Samtec-SSW-110-01-G-S_26 to CON-Samtec-SSW-110-01-G-S_26_3]

## CON-Samtec-SSW-110-01-G-S_26
designator X?, comment SSW-110-01-G-S  (value not drawn)
Receptacle Female Socket 1x26 pin 2.54mm pitch; Manufacturer Name: Samtec; Pitch: 2.54mm; No. of ways: 1x26; Manufacturer Part No.: SSW-110-01-G-S
footprint T_Samtec_SSW-110-01-G-S_26
part A pins: 1
part B pins: 2
part C pins: 3
part D pins: 4
part E pins: 5
part F pins: 6
part G pins: 7
part H pins: 8
part I pins: 9
part J pins: 10
part K pins: 11
part L pins: 12
part M pins: 13
part N pins: 14
part O pins: 15
part P pins: 16
part Q pins: 17
part R pins: 18
part S pins: 19
part T pins: 20
part U pins: 21
part V pins: 22
part W pins: 23
part X pins: 24
part Y pins: 25
part Z pins: 26
part A text: 1 of 26
part B text: 2 of 26
part C text: 3 of 26
part D text: 4 of 26
part E text: 5 of 26
part F text: 6 of 26
part G text: 7 of 26
part H text: 8 of 26
part I text: 9 of 26
part J text: 10 of 26
part K text: 11 of 26
part L text: 12 of 26
part M text: 13 of 26
part N text: 14 of 26
part O text: 15 of 26
part P text: 16 of 26
part Q text: 17 of 26
part R text: 18 of 26
part S text: 19 of 26
part T text: 20 of 26
part U text: 21 of 26
part V text: 22 of 26
part W text: 23 of 26
part X text: 24 of 26
part Y text: 25 of 26
part Z text: 26 of 26

## CON-Samtec-SSW-110-01-G-S_26_2
designator X?, comment SSW-110-01-G-S  (value not drawn)
Receptacle Female Socket 1x10 pin 2.54mm pitch; Manufacturer Name: Samtec; Pitch: 2.54mm; No. of ways: 1x10; Manufacturer Part No.: SSW-110-01-G-S
footprint T_Samtec_SSW-110-01-G-S_26_2
part A pins: 7
part B pins: 8
part C pins: 9
part D pins: 10
part E pins: 11
part F pins: 12
part G pins: 13
part H pins: 14
part I pins: 15
part J pins: 16
part A text: 7 of 36
part B text: 8 of 36
part C text: 9 of 36
part D text: 10 of 36
part E text: 11 of 36
part F text: 12 of 36
part G text: 13 of 36
part H text: 14 of 36
part I text: 15 of 36
part J text: 16 of 36

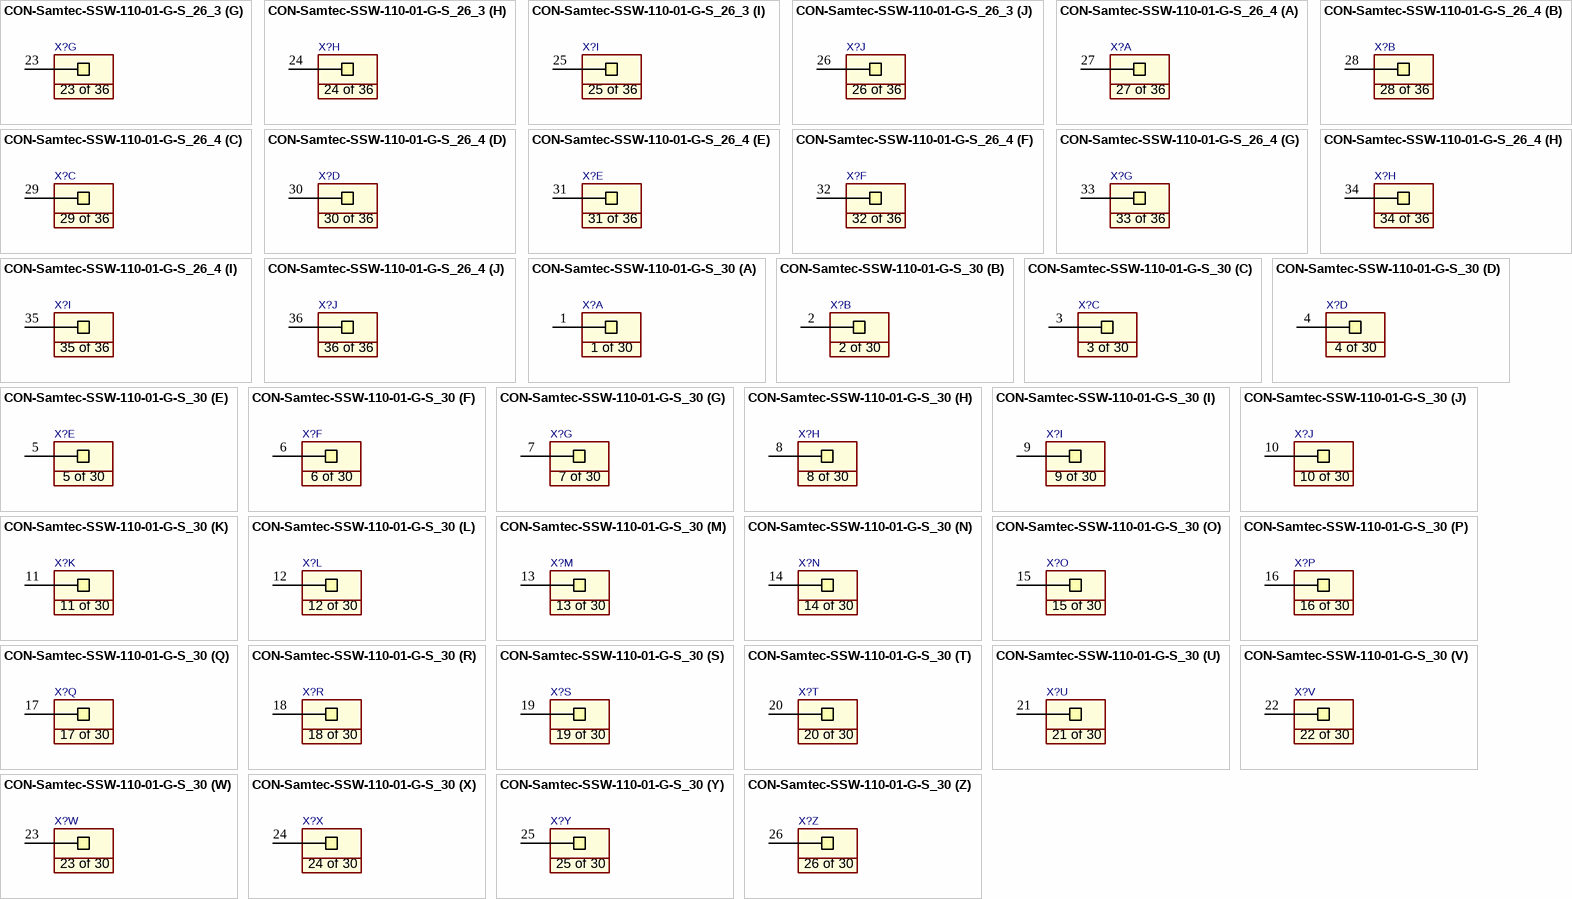
[diagram p4: symbols CON-Samtec-SSW-110-01-G-S_26_3 to CON-Samtec-SSW-110-01-G-S_30]

## CON-Samtec-SSW-110-01-G-S_26_3
designator X?, comment SSW-110-01-G-S  (value not drawn)
Receptacle Female Socket 1x10 pin 2.54mm pitch; Manufacturer Name: Samtec; Pitch: 2.54mm; No. of ways: 1x10; Manufacturer Part No.: SSW-110-01-G-S
footprint T_Samtec_SSW-110-01-G-S_26_3
part A pins: 17
part B pins: 18
part C pins: 19
part D pins: 20
part E pins: 21
part F pins: 22
part G pins: 23
part H pins: 24
part I pins: 25
part J pins: 26
part A text: 17 of 36
part B text: 18 of 36
part C text: 19 of 36
part D text: 20 of 36
part E text: 21 of 36
part F text: 22 of 36
part G text: 23 of 36
part H text: 24 of 36
part I text: 25 of 36
part J text: 26 of 36

## CON-Samtec-SSW-110-01-G-S_26_4
designator X?, comment SSW-110-01-G-S  (value not drawn)
Receptacle Female Socket 1x10 pin 2.54mm pitch; Manufacturer Name: Samtec; Pitch: 2.54mm; No. of ways: 1x10; Manufacturer Part No.: SSW-110-01-G-S
footprint T_Samtec_SSW-110-01-G-S_26_4
part A pins: 27
part B pins: 28
part C pins: 29
part D pins: 30
part E pins: 31
part F pins: 32
part G pins: 33
part H pins: 34
part I pins: 35
part J pins: 36
part A text: 27 of 36
part B text: 28 of 36
part C text: 29 of 36
part D text: 30 of 36
part E text: 31 of 36
part F text: 32 of 36
part G text: 33 of 36
part H text: 34 of 36
part I text: 35 of 36
part J text: 36 of 36

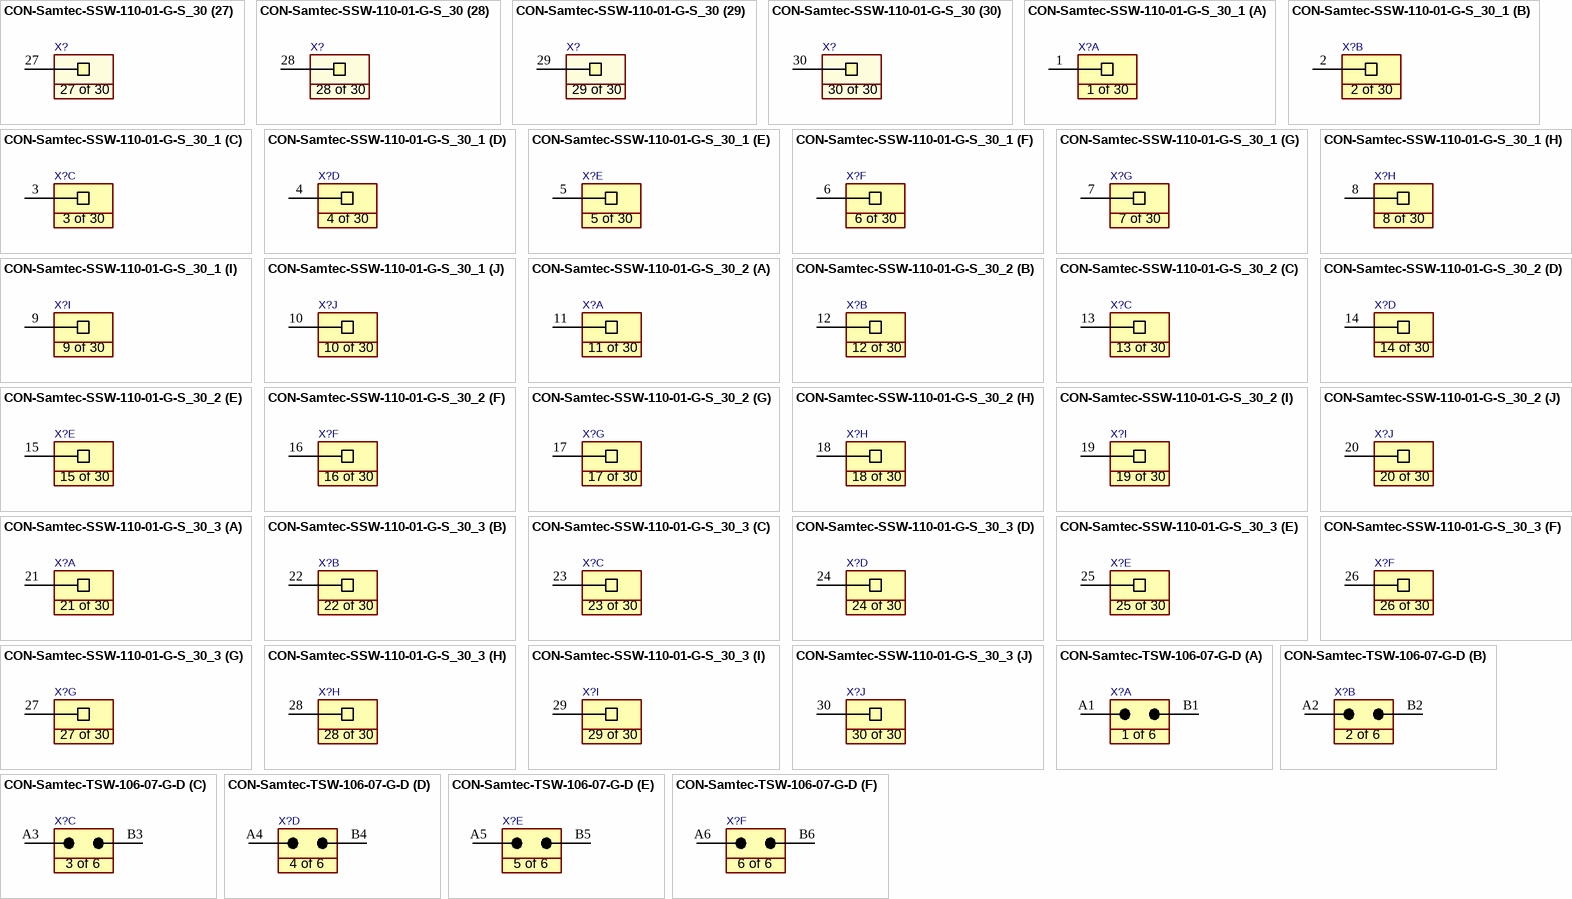
[diagram p5: symbols CON-Samtec-SSW-110-01-G-S_30 to CON-Samtec-TSW-106-07-G-D]

## CON-Samtec-SSW-110-01-G-S_30
designator X?, comment SSW-110-01-G-S  (value not drawn)
Receptacle Female Socket 1x30 pin 2.54mm pitch; Manufacturer Name: Samtec; Pitch: 2.54mm; No. of ways: 1x30; Manufacturer Part No.: SSW-110-01-G-S
footprint T_Samtec_SSW-110-01-G-S_30 (Receptacle Female Socket,  1x30 Pins, 2.54 mm pitch)
part A pins: 1
part B pins: 2
part C pins: 3
part D pins: 4
part E pins: 5
part F pins: 6
part G pins: 7
part H pins: 8
part I pins: 9
part J pins: 10
part K pins: 11
part L pins: 12
part M pins: 13
part N pins: 14
part O pins: 15
part P pins: 16
part Q pins: 17
part R pins: 18
part S pins: 19
part T pins: 20
part U pins: 21
part V pins: 22
part W pins: 23
part X pins: 24
part Y pins: 25
part Z pins: 26
part 27 pins: 27
part 28 pins: 28
part 29 pins: 29
part 30 pins: 30
part A text: 1 of 30
part B text: 2 of 30
part C text: 3 of 30
part D text: 4 of 30
part E text: 5 of 30
part F text: 6 of 30
part G text: 7 of 30
part H text: 8 of 30
part I text: 9 of 30
part J text: 10 of 30
part K text: 11 of 30
part L text: 12 of 30
part M text: 13 of 30
part N text: 14 of 30
part O text: 15 of 30
part P text: 16 of 30
part Q text: 17 of 30
part R text: 18 of 30
part S text: 19 of 30
part T text: 20 of 30
part U text: 21 of 30
part V text: 22 of 30
part W text: 23 of 30
part X text: 24 of 30
part Y text: 25 of 30
part Z text: 26 of 30
part 27 text: 27 of 30
part 28 text: 28 of 30
part 29 text: 29 of 30
part 30 text: 30 of 30

## CON-Samtec-SSW-110-01-G-S_30_1
designator X?, comment SSW-110-01-G-S  (value not drawn)
Receptacle Female Socket 1x10 pin 2.54mm pitch; Manufacturer Name: Samtec; Pitch: 2.54mm; Manufacturer Part No.: SSW-110-01-G-S; No. of ways: 1x10
footprint T_Samtec_SSW-110-01-G-S_30_1
part A pins: 1
part B pins: 2
part C pins: 3
part D pins: 4
part E pins: 5
part F pins: 6
part G pins: 7
part H pins: 8
part I pins: 9
part J pins: 10
part A text: 1 of 30
part B text: 2 of 30
part C text: 3 of 30
part D text: 4 of 30
part E text: 5 of 30
part F text: 6 of 30
part G text: 7 of 30
part H text: 8 of 30
part I text: 9 of 30
part J text: 10 of 30

## CON-Samtec-SSW-110-01-G-S_30_2
designator X?, comment SSW-110-01-G-S  (value not drawn)
Receptacle Female Socket 1x10 pin 2.54mm pitch; Manufacturer Name: Samtec; Pitch: 2.54mm; No. of ways: 1x10; Manufacturer Part No.: SSW-110-01-G-S
footprint T_Samtec_SSW-110-01-G-S_30_2
part A pins: 11
part B pins: 12
part C pins: 13
part D pins: 14
part E pins: 15
part F pins: 16
part G pins: 17
part H pins: 18
part I pins: 19
part J pins: 20
part A text: 11 of 30
part B text: 12 of 30
part C text: 13 of 30
part D text: 14 of 30
part E text: 15 of 30
part F text: 16 of 30
part G text: 17 of 30
part H text: 18 of 30
part I text: 19 of 30
part J text: 20 of 30

## CON-Samtec-SSW-110-01-G-S_30_3
designator X?, comment SSW-110-01-G-S  (value not drawn)
Receptacle Female Socket 1x10 pin 2.54mm pitch; Manufacturer Name: Samtec; Pitch: 2.54mm; No. of ways: 1x10; Manufacturer Part No.: SSW-110-01-G-S
footprint T_Samtec_SSW-110-01-G-S_30_3
part A pins: 21
part B pins: 22
part C pins: 23
part D pins: 24
part E pins: 25
part F pins: 26
part G pins: 27
part H pins: 28
part I pins: 29
part J pins: 30
part A text: 21 of 30
part B text: 22 of 30
part C text: 23 of 30
part D text: 24 of 30
part E text: 25 of 30
part F text: 26 of 30
part G text: 27 of 30
part H text: 28 of 30
part I text: 29 of 30
part J text: 30 of 30

## CON-Samtec-TSW-106-07-G-D
designator X?, comment TSW-106-07-G-D  (value not drawn)
Header 2x6 pin 2.54mm pitch; Manufacturer Name: Samtec; Pitch: 2.54mm; No. of ways: 2x6; Manufacturer Part No.: TSW-106-07-G-D
footprint T_Samtec_TSW-106-07-G-D
part A pins: A1, B1
part B pins: A2, B2
part C pins: A3, B3
part D pins: A4, B4
part E pins: A5, B5
part F pins: A6, B6
part A text: 1 of 6
part B text: 2 of 6
part C text: 3 of 6
part D text: 4 of 6
part E text: 5 of 6
part F text: 6 of 6

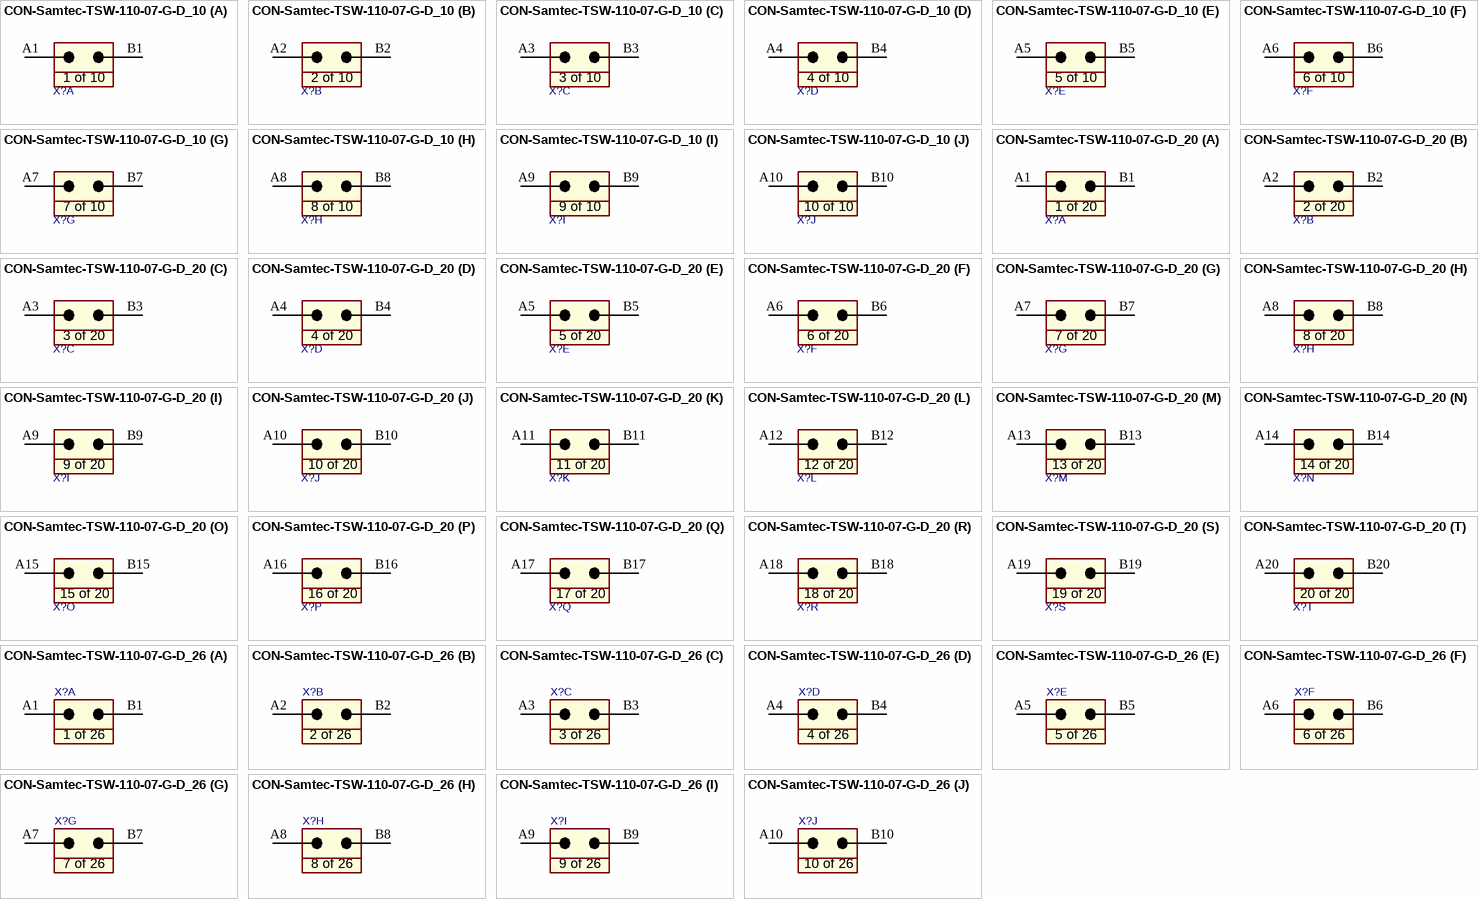
[diagram p6: symbols CON-Samtec-TSW-110-07-G-D_10 to CON-Samtec-TSW-110-07-G-D_26]

## CON-Samtec-TSW-110-07-G-D_10
designator X?, comment TSW-110-07-G-D  (value not drawn)
Header 2x10 pin 2.54mm pitch; Manufacturer Name: Samtec; Pitch: 2.54mm; No. of ways: 2x10; Manufacturer Part No.: TSW-110-07-G-D
footprint T_Samtec_TSW-110-07-G-D_10 (Header 2x10 pin 2.54mm pitch)
part A pins: A1, B1
part B pins: A2, B2
part C pins: A3, B3
part D pins: A4, B4
part E pins: A5, B5
part F pins: A6, B6
part G pins: A7, B7
part H pins: A8, B8
part I pins: A9, B9
part J pins: A10, B10
part A text: 1 of 10
part B text: 2 of 10
part C text: 3 of 10
part D text: 4 of 10
part E text: 5 of 10
part F text: 6 of 10
part G text: 7 of 10
part H text: 8 of 10
part I text: 9 of 10
part J text: 10 of 10

## CON-Samtec-TSW-110-07-G-D_20
designator X?, comment TSW-110-07-G-D  (value not drawn)
Header 2x20 pin 2.54mm pitch; Manufacturer Name: Samtec; Pitch: 2.54mm; No. of ways: 2x20; Manufacturer Part No.: TSW-110-07-G-D
footprint T_Samtec_TSW-110-07-G-D_20 (Header 2x20 pin 2.54mm pitch)
part A pins: A1, B1
part B pins: A2, B2
part C pins: A3, B3
part D pins: A4, B4
part E pins: A5, B5
part F pins: A6, B6
part G pins: A7, B7
part H pins: A8, B8
part I pins: A9, B9
part J pins: A10, B10
part K pins: A11, B11
part L pins: A12, B12
part M pins: A13, B13
part N pins: A14, B14
part O pins: A15, B15
part P pins: A16, B16
part Q pins: A17, B17
part R pins: A18, B18
part S pins: A19, B19
part T pins: A20, B20
part A text: 1 of 20
part B text: 2 of 20
part C text: 3 of 20
part D text: 4 of 20
part E text: 5 of 20
part F text: 6 of 20
part G text: 7 of 20
part H text: 8 of 20
part I text: 9 of 20
part J text: 10 of 20
part K text: 11 of 20
part L text: 12 of 20
part M text: 13 of 20
part N text: 14 of 20
part O text: 15 of 20
part P text: 16 of 20
part Q text: 17 of 20
part R text: 18 of 20
part S text: 19 of 20
part T text: 20 of 20

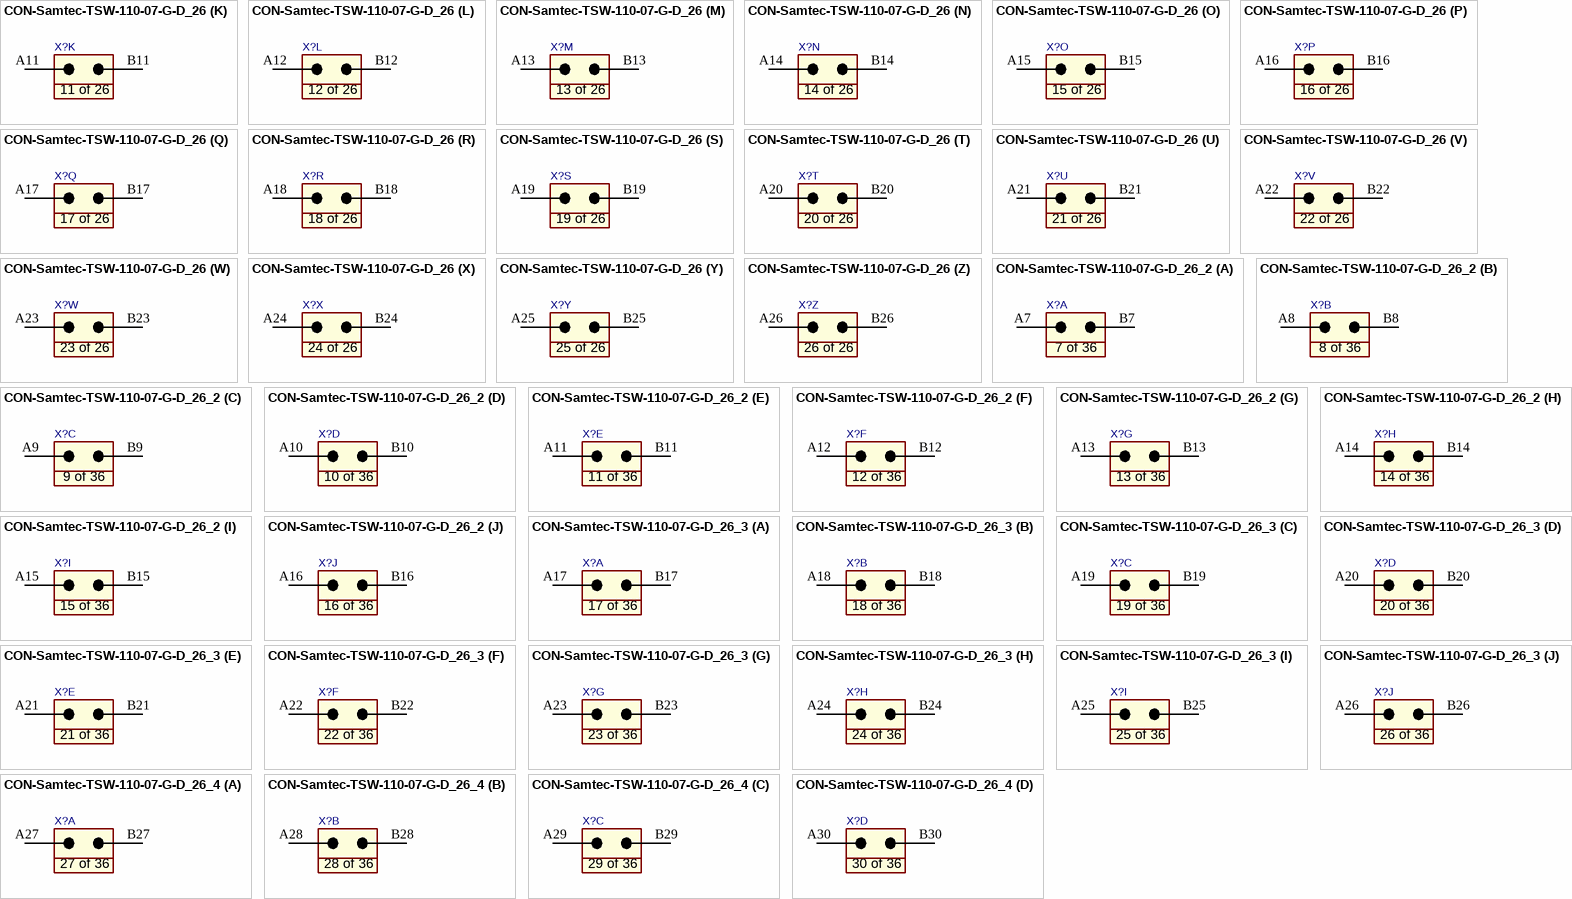
[diagram p7: symbols CON-Samtec-TSW-110-07-G-D_26 to CON-Samtec-TSW-110-07-G-D_26_4]

## CON-Samtec-TSW-110-07-G-D_26
designator X?, comment TSW-110-07-G-D  (value not drawn)
Header 2x26 pin 2.54mm pitch; Manufacturer Name: Samtec; Pitch: 2.54mm; No. of ways: 2x26; Manufacturer Part No.: TSW-110-07-G-D
footprint T_Samtec_TSW-110-07-G-D_26
part A pins: A1, B1
part B pins: A2, B2
part C pins: A3, B3
part D pins: A4, B4
part E pins: A5, B5
part F pins: A6, B6
part G pins: A7, B7
part H pins: A8, B8
part I pins: A9, B9
part J pins: A10, B10
part K pins: A11, B11
part L pins: A12, B12
part M pins: A13, B13
part N pins: A14, B14
part O pins: A15, B15
part P pins: A16, B16
part Q pins: A17, B17
part R pins: A18, B18
part S pins: A19, B19
part T pins: A20, B20
part U pins: A21, B21
part V pins: A22, B22
part W pins: A23, B23
part X pins: A24, B24
part Y pins: A25, B25
part Z pins: A26, B26
part A text: 1 of 26
part B text: 2 of 26
part C text: 3 of 26
part D text: 4 of 26
part E text: 5 of 26
part F text: 6 of 26
part G text: 7 of 26
part H text: 8 of 26
part I text: 9 of 26
part J text: 10 of 26
part K text: 11 of 26
part L text: 12 of 26
part M text: 13 of 26
part N text: 14 of 26
part O text: 15 of 26
part P text: 16 of 26
part Q text: 17 of 26
part R text: 18 of 26
part S text: 19 of 26
part T text: 20 of 26
part U text: 21 of 26
part V text: 22 of 26
part W text: 23 of 26
part X text: 24 of 26
part Y text: 25 of 26
part Z text: 26 of 26

## CON-Samtec-TSW-110-07-G-D_26_2
designator X?, comment TSW-110-07-G-D  (value not drawn)
Header 2x26 pin 2.54mm pitch; Manufacturer Name: Samtec; No. of ways: 2x10; Pitch: 2.54mm; Manufacturer Part No.: TSW-110-07-G-D
footprint T_Samtec_TSW-110-07-G-D_26_2
part A pins: A7, B7
part B pins: A8, B8
part C pins: A9, B9
part D pins: A10, B10
part E pins: A11, B11
part F pins: A12, B12
part G pins: A13, B13
part H pins: A14, B14
part I pins: A15, B15
part J pins: A16, B16
part A text: 7 of 36
part B text: 8 of 36
part C text: 9 of 36
part D text: 10 of 36
part E text: 11 of 36
part F text: 12 of 36
part G text: 13 of 36
part H text: 14 of 36
part I text: 15 of 36
part J text: 16 of 36

## CON-Samtec-TSW-110-07-G-D_26_3
designator X?, comment TSW-110-07-G-D  (value not drawn)
Header 2x26 pin 2.54mm pitch; Manufacturer Name: Samtec; No. of ways: 2x10; Pitch: 2.54mm; Manufacturer Part No.: TSW-110-07-G-D
footprint T_Samtec_TSW-110-07-G-D_26_3
part A pins: A17, B17
part B pins: A18, B18
part C pins: A19, B19
part D pins: A20, B20
part E pins: A21, B21
part F pins: A22, B22
part G pins: A23, B23
part H pins: A24, B24
part I pins: A25, B25
part J pins: A26, B26
part A text: 17 of 36
part B text: 18 of 36
part C text: 19 of 36
part D text: 20 of 36
part E text: 21 of 36
part F text: 22 of 36
part G text: 23 of 36
part H text: 24 of 36
part I text: 25 of 36
part J text: 26 of 36

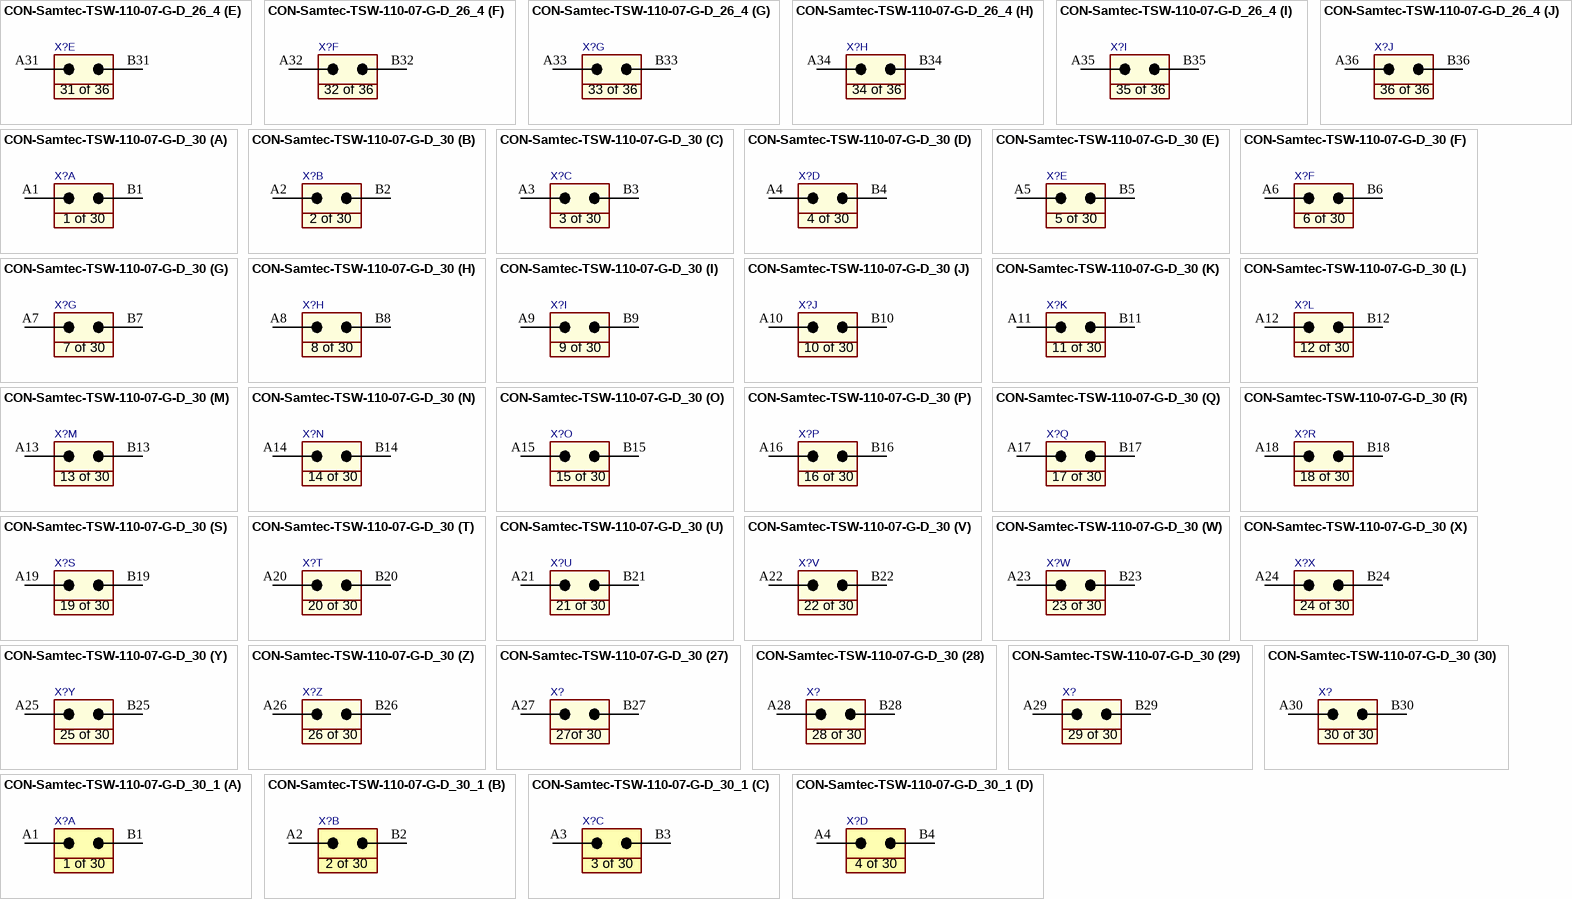
[diagram p8: symbols CON-Samtec-TSW-110-07-G-D_26_4 to CON-Samtec-TSW-110-07-G-D_30_1]

## CON-Samtec-TSW-110-07-G-D_26_4
designator X?, comment TSW-110-07-G-D  (value not drawn)
Header 2x26 pin 2.54mm pitch; Manufacturer Name: Samtec; No. of ways: 2x10; Pitch: 2.54mm; Manufacturer Part No.: TSW-110-07-G-D
footprint T_Samtec_TSW-110-07-G-D_26_4
part A pins: A27, B27
part B pins: A28, B28
part C pins: A29, B29
part D pins: A30, B30
part E pins: A31, B31
part F pins: A32, B32
part G pins: A33, B33
part H pins: A34, B34
part I pins: A35, B35
part J pins: A36, B36
part A text: 27 of 36
part B text: 28 of 36
part C text: 29 of 36
part D text: 30 of 36
part E text: 31 of 36
part F text: 32 of 36
part G text: 33 of 36
part H text: 34 of 36
part I text: 35 of 36
part J text: 36 of 36

## CON-Samtec-TSW-110-07-G-D_30
designator X?, comment TSW-110-07-G-D  (value not drawn)
Header 2x30 pin 2.54mm pitch; Manufacturer Name: Samtec; Pitch: 2.54mm; No. of ways: 2x30; Manufacturer Part No.: TSW-110-07-G-D
footprint T_Samtec_TSW-110-07-G-D_30
part A pins: A1, B1
part B pins: A2, B2
part C pins: A3, B3
part D pins: A4, B4
part E pins: A5, B5
part F pins: A6, B6
part G pins: A7, B7
part H pins: A8, B8
part I pins: A9, B9
part J pins: A10, B10
part K pins: A11, B11
part L pins: A12, B12
part M pins: A13, B13
part N pins: A14, B14
part O pins: A15, B15
part P pins: A16, B16
part Q pins: A17, B17
part R pins: A18, B18
part S pins: A19, B19
part T pins: A20, B20
part U pins: A21, B21
part V pins: A22, B22
part W pins: A23, B23
part X pins: A24, B24
part Y pins: A25, B25
part Z pins: A26, B26
part 27 pins: A27, B27
part 28 pins: A28, B28
part 29 pins: A29, B29
part 30 pins: A30, B30
part A text: 1 of 30
part B text: 2 of 30
part C text: 3 of 30
part D text: 4 of 30
part E text: 5 of 30
part F text: 6 of 30
part G text: 7 of 30
part H text: 8 of 30
part I text: 9 of 30
part J text: 10 of 30
part K text: 11 of 30
part L text: 12 of 30
part M text: 13 of 30
part N text: 14 of 30
part O text: 15 of 30
part P text: 16 of 30
part Q text: 17 of 30
part R text: 18 of 30
part S text: 19 of 30
part T text: 20 of 30
part U text: 21 of 30
part V text: 22 of 30
part W text: 23 of 30
part X text: 24 of 30
part Y text: 25 of 30
part Z text: 26 of 30
part 27 text: 27of 30
part 28 text: 28 of 30
part 29 text: 29 of 30
part 30 text: 30 of 30

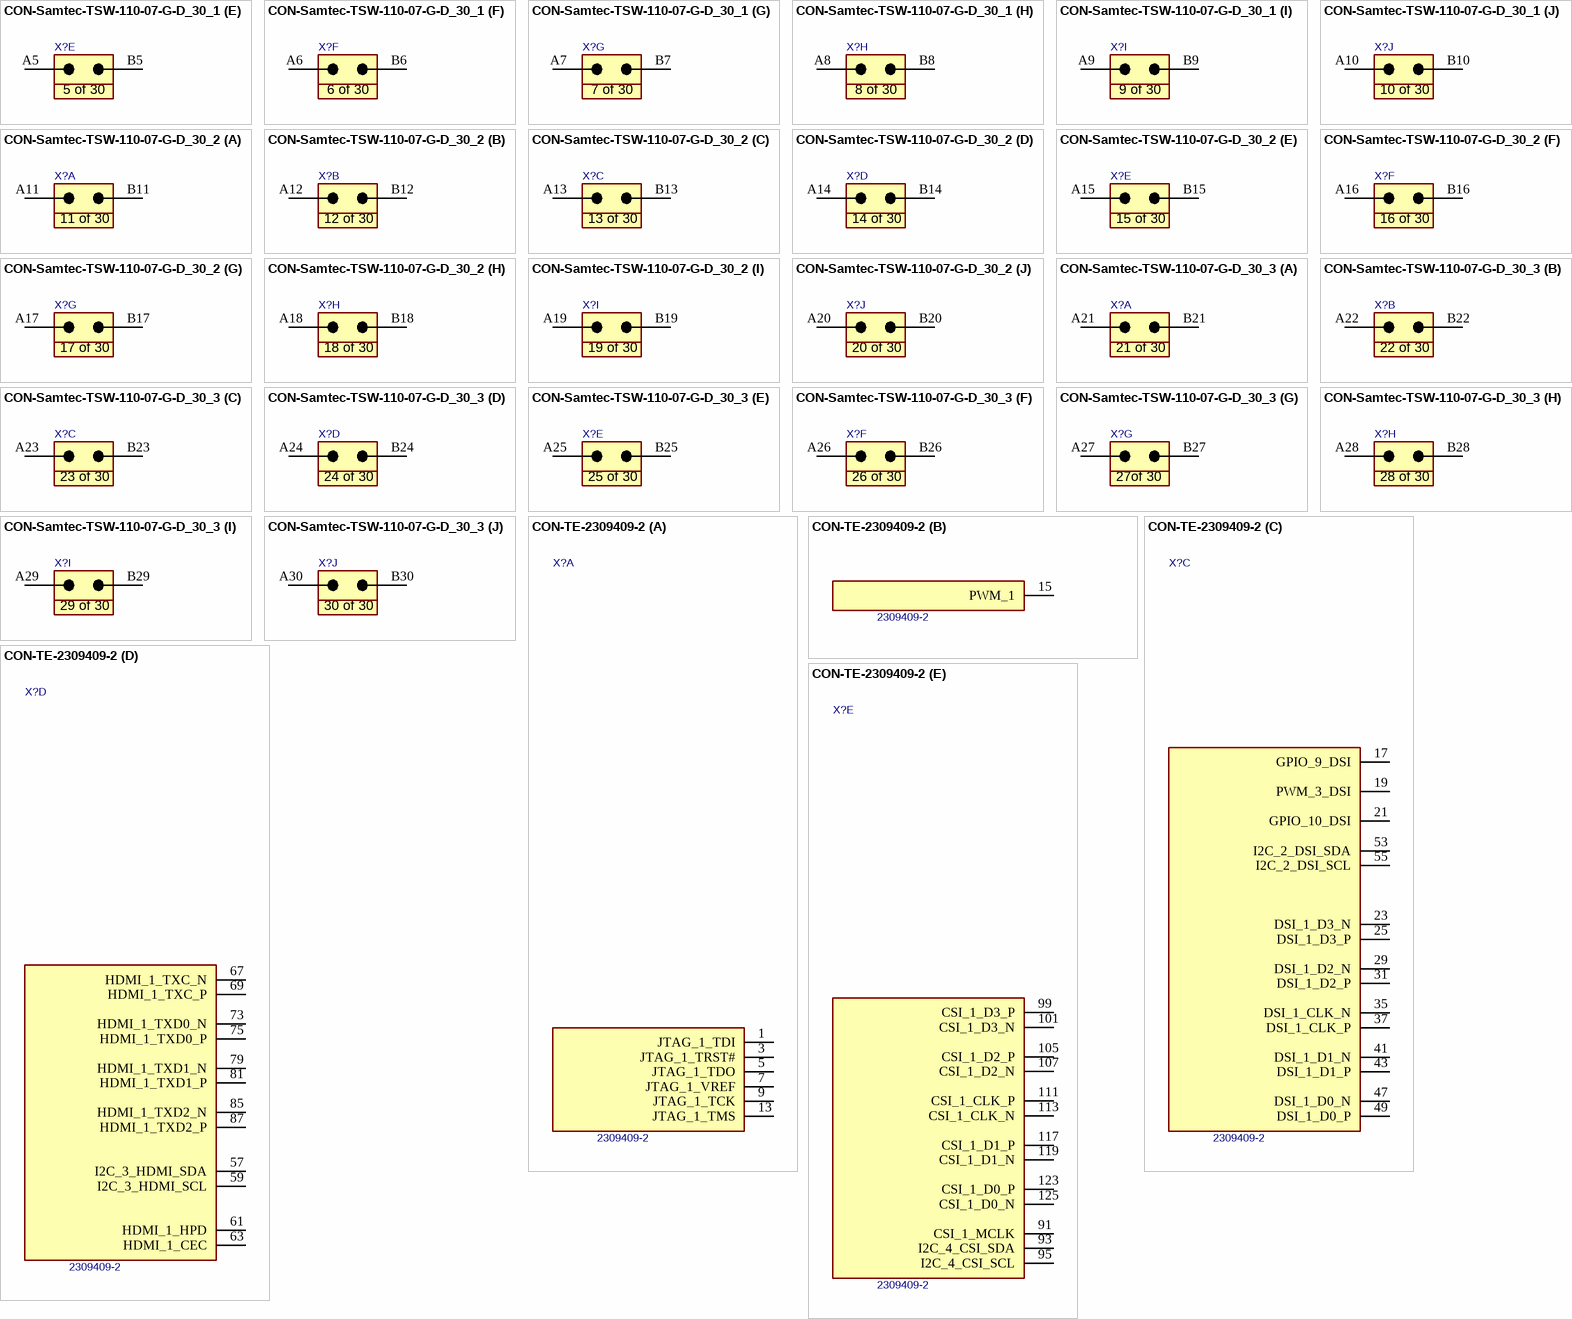
[diagram p9: symbols CON-Samtec-TSW-110-07-G-D_30_1 to CON-TE-2309409-2]

## CON-Samtec-TSW-110-07-G-D_30_1
designator X?, comment TSW-110-07-G-D  (value not drawn)
Header 2x10 pin 2.54mm pitch; Manufacturer Name: Samtec; Pitch: 2.54mm; No. of ways: 2x10; Manufacturer Part No.: TSW-110-07-G-D
footprint T_Samtec_TSW-110-07-G-D_30_1
part A pins: A1, B1
part B pins: A2, B2
part C pins: A3, B3
part D pins: A4, B4
part E pins: A5, B5
part F pins: A6, B6
part G pins: A7, B7
part H pins: A8, B8
part I pins: A9, B9
part J pins: A10, B10
part A text: 1 of 30
part B text: 2 of 30
part C text: 3 of 30
part D text: 4 of 30
part E text: 5 of 30
part F text: 6 of 30
part G text: 7 of 30
part H text: 8 of 30
part I text: 9 of 30
part J text: 10 of 30

## CON-Samtec-TSW-110-07-G-D_30_2
designator X?, comment TSW-110-07-G-D  (value not drawn)
Header 2x10 pin 2.54mm pitch; Manufacturer Name: Samtec; Pitch: 2.54mm; No. of ways: 2x10; Manufacturer Part No.: TSW-110-07-G-D
footprint T_Samtec_TSW-110-07-G-D_30_2
part A pins: A11, B11
part B pins: A12, B12
part C pins: A13, B13
part D pins: A14, B14
part E pins: A15, B15
part F pins: A16, B16
part G pins: A17, B17
part H pins: A18, B18
part I pins: A19, B19
part J pins: A20, B20
part A text: 11 of 30
part B text: 12 of 30
part C text: 13 of 30
part D text: 14 of 30
part E text: 15 of 30
part F text: 16 of 30
part G text: 17 of 30
part H text: 18 of 30
part I text: 19 of 30
part J text: 20 of 30

## CON-Samtec-TSW-110-07-G-D_30_3
designator X?, comment TSW-110-07-G-D  (value not drawn)
Header 2x10 pin 2.54mm pitch; Manufacturer Name: Samtec; Pitch: 2.54mm; No. of ways: 2x10; Manufacturer Part No.: TSW-110-07-G-D
footprint T_Samtec_TSW-110-07-G-D_30_3
part A pins: A21, B21
part B pins: A22, B22
part C pins: A23, B23
part D pins: A24, B24
part E pins: A25, B25
part F pins: A26, B26
part G pins: A27, B27
part H pins: A28, B28
part I pins: A29, B29
part J pins: A30, B30
part A text: 21 of 30
part B text: 22 of 30
part C text: 23 of 30
part D text: 24 of 30
part E text: 25 of 30
part F text: 26 of 30
part G text: 27of 30
part H text: 28 of 30
part I text: 29 of 30
part J text: 30 of 30

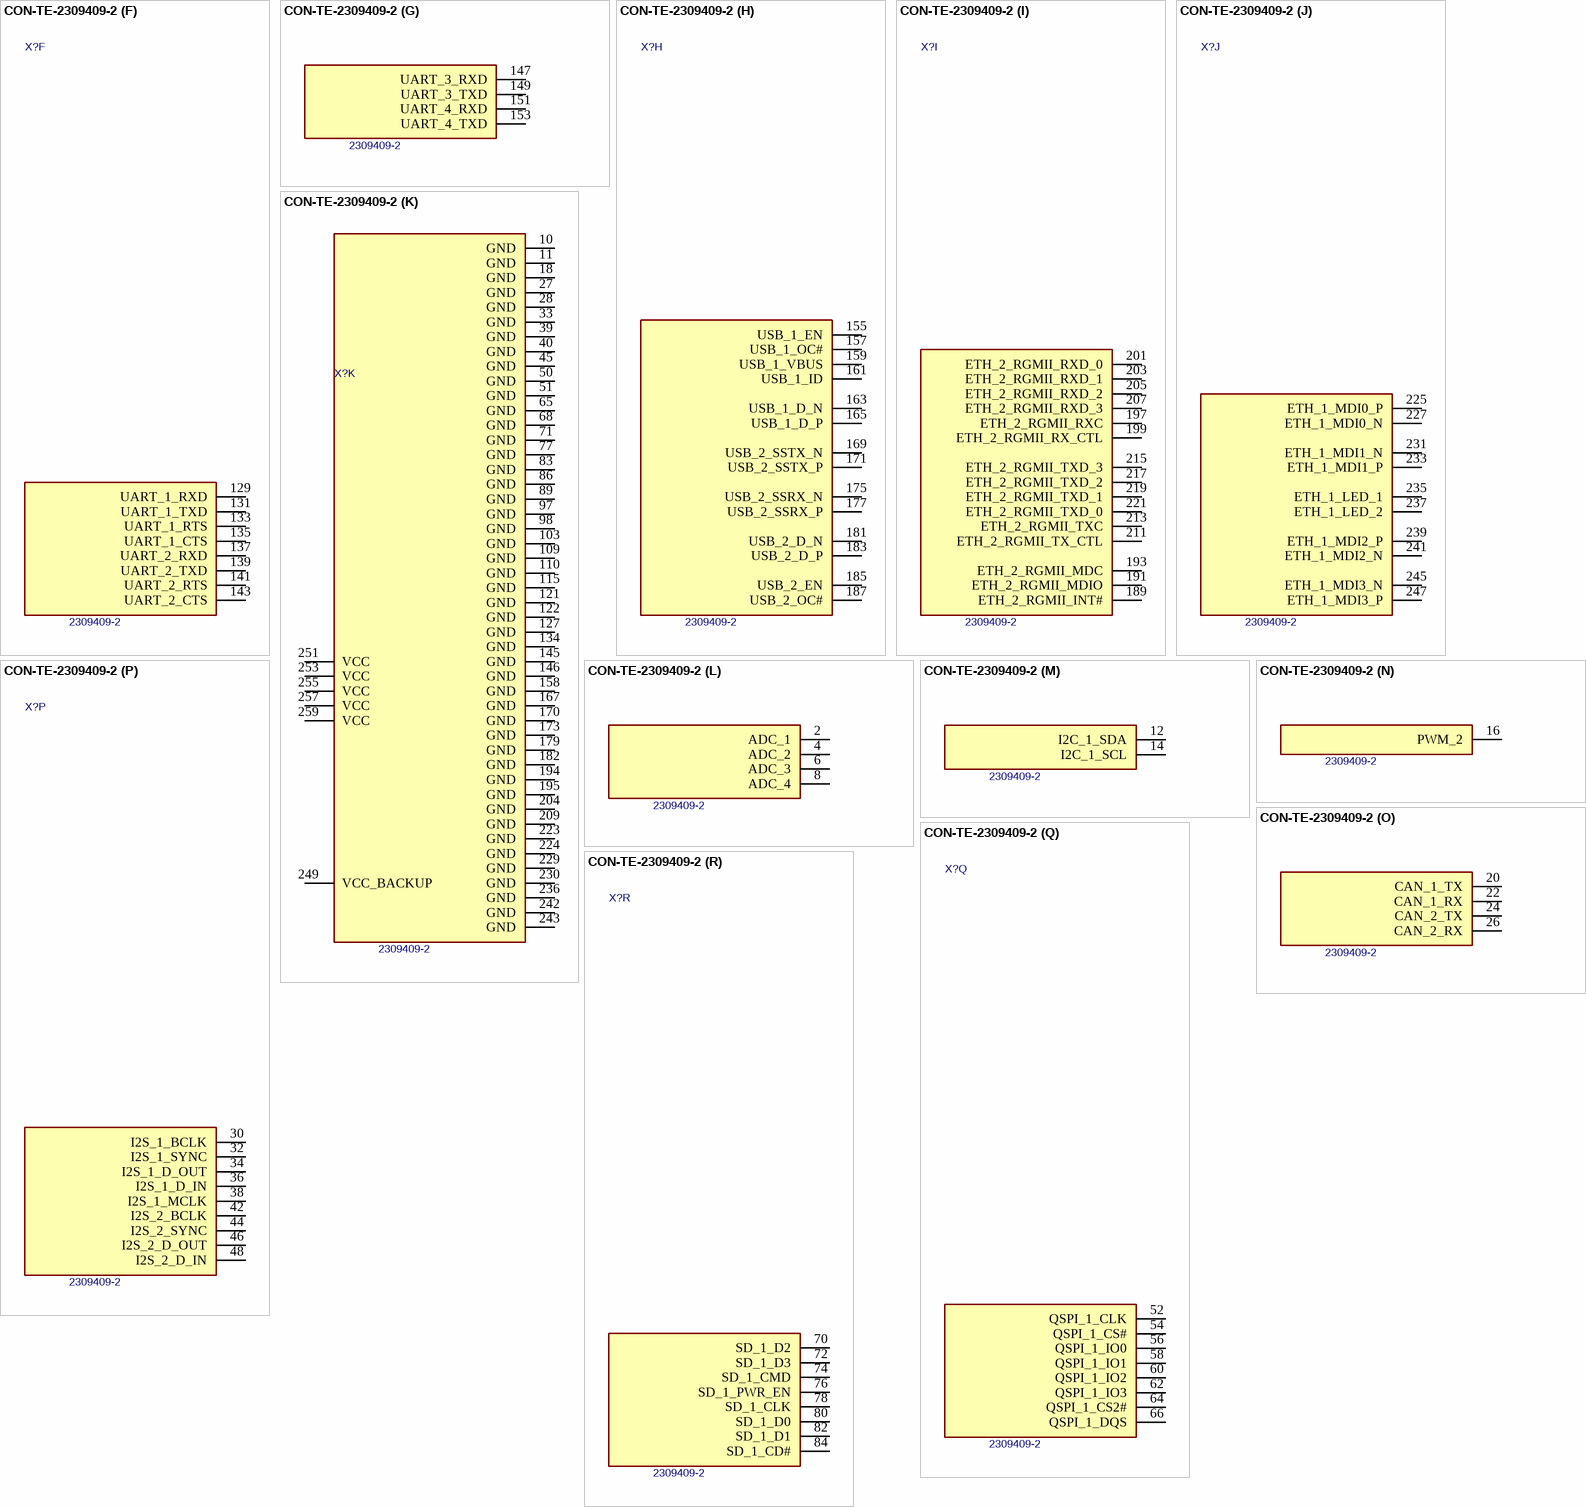
[diagram p10: symbol CON-TE-2309409-2]

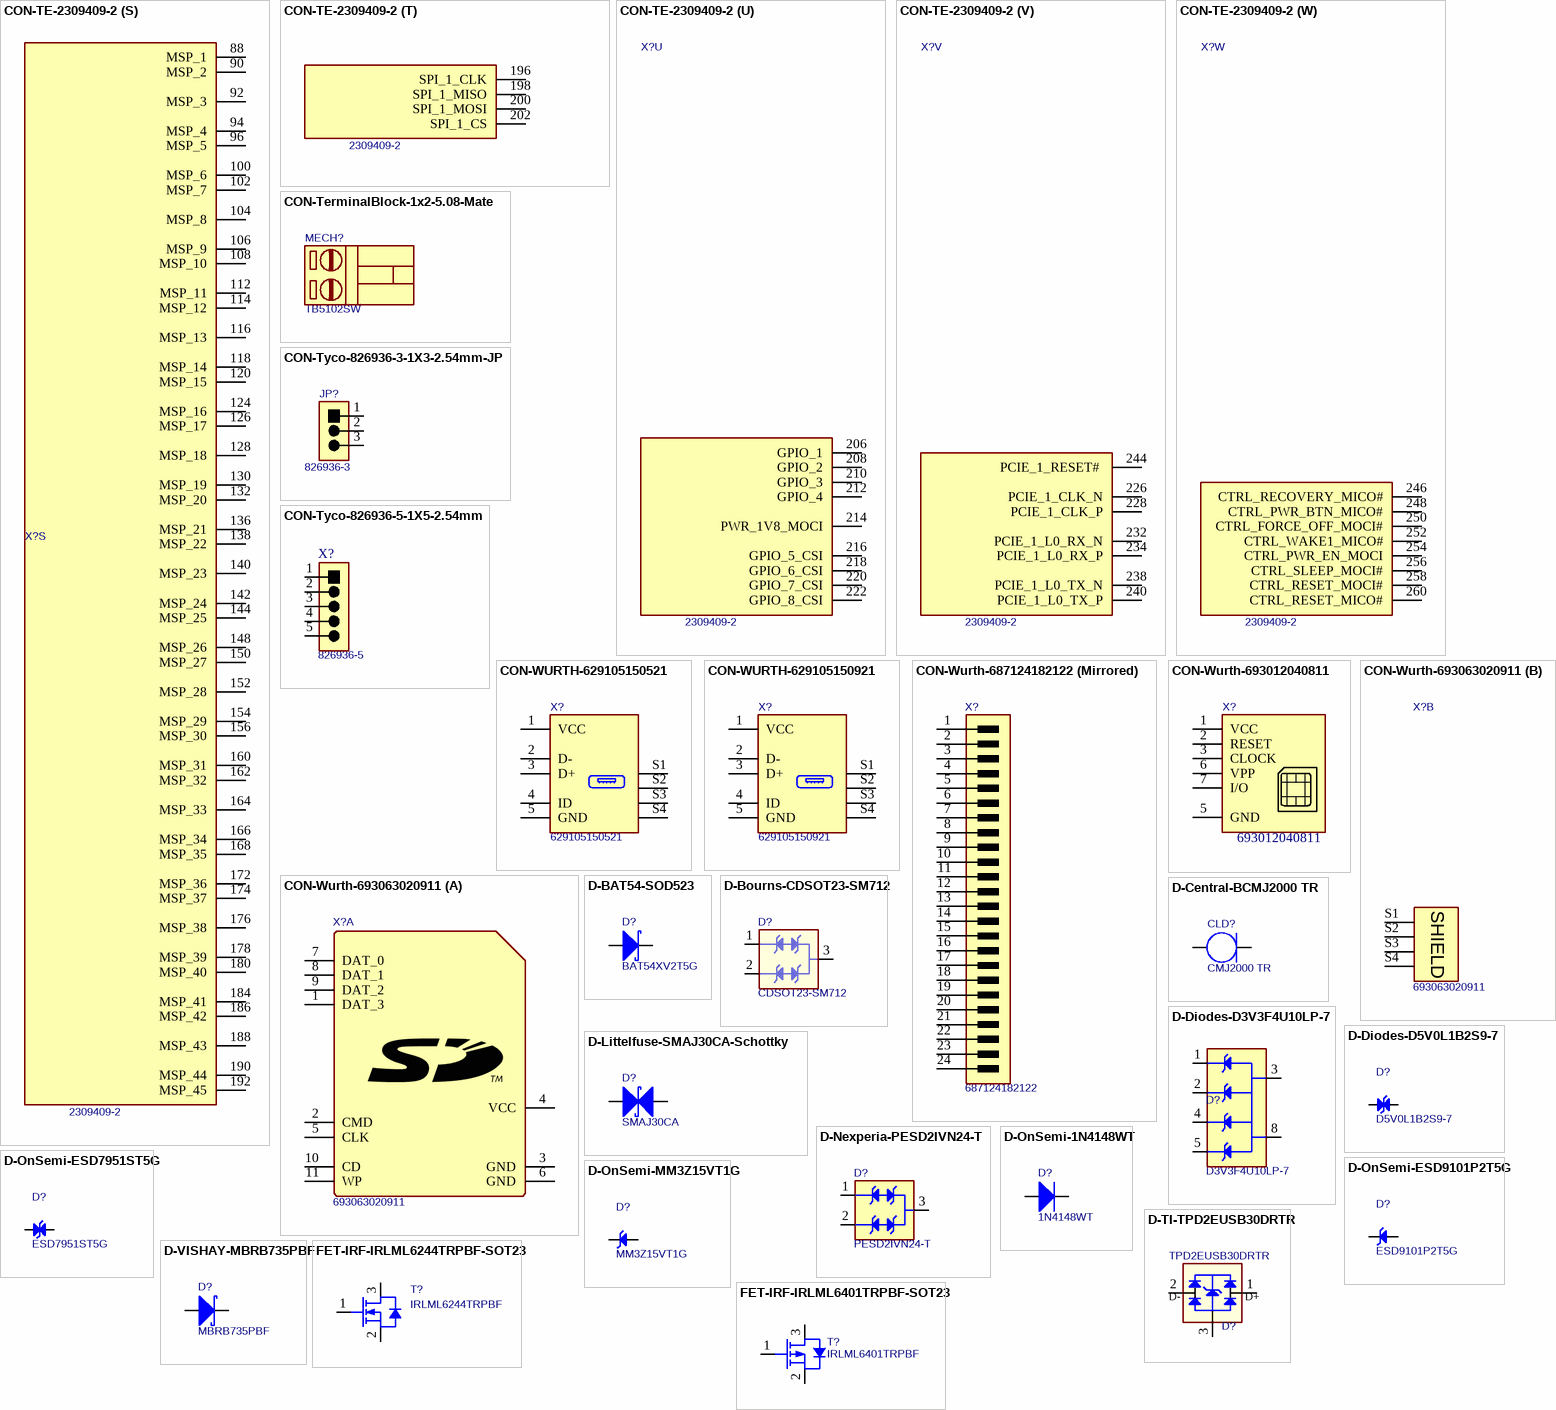
[diagram p11: symbols CON-TE-2309409-2 to FET-IRF-IRLML6401TRPBF-SOT23]

## CON-TE-2309409-2
designator X?, comment 2309409-2
DDR4 SODIMM Socket, 260 pins, 5.2mm(H), 0.5mm Pitch; Manufacturer Name: TE Connectivity; Manufacturer Part No.: 2309409-2; Temperature Range: -40C to +125C; Package: DDR4-SODIMM-260
footprint CON-TE-2309409-2 (DDDR4 SODIMM SOCKET, 260 PINS, 0.5mm PITCH)
part A pins: 1 JTAG_1_TDI, 3 JTAG_1_TRST#, 5 JTAG_1_TDO, 7 JTAG_1_VREF, 9 JTAG_1_TCK, 13 JTAG_1_TMS
part B pins: 15 PWM_1
part C pins: 17 GPIO_9_DSI, 19 PWM_3_DSI, 21 GPIO_10_DSI, 23 DSI_1_D3_N, 25 DSI_1_D3_P, 29 DSI_1_D2_N, 31 DSI_1_D2_P, 35 DSI_1_CLK_N, 37 DSI_1_CLK_P, 41 DSI_1_D1_N, 43 DSI_1_D1_P, 47 DSI_1_D0_N, 49 DSI_1_D0_P, 53 I2C_2_DSI_SDA, 55 I2C_2_DSI_SCL
part D pins: 57 I2C_3_HDMI_SDA, 59 I2C_3_HDMI_SCL, 61 HDMI_1_HPD, 63 HDMI_1_CEC, 67 HDMI_1_TXC_N, 69 HDMI_1_TXC_P, 73 HDMI_1_TXD0_N, 75 HDMI_1_TXD0_P, 79 HDMI_1_TXD1_N, 81 HDMI_1_TXD1_P, 85 HDMI_1_TXD2_N, 87 HDMI_1_TXD2_P
part E pins: 91 CSI_1_MCLK, 93 I2C_4_CSI_SDA, 95 I2C_4_CSI_SCL, 99 CSI_1_D3_P, 101 CSI_1_D3_N, 105 CSI_1_D2_P, 107 CSI_1_D2_N, 111 CSI_1_CLK_P, 113 CSI_1_CLK_N, 117 CSI_1_D1_P, 119 CSI_1_D1_N, 123 CSI_1_D0_P, 125 CSI_1_D0_N
part F pins: 129 UART_1_RXD, 131 UART_1_TXD, 133 UART_1_RTS, 135 UART_1_CTS, 137 UART_2_RXD, 139 UART_2_TXD, 141 UART_2_RTS, 143 UART_2_CTS
part G pins: 147 UART_3_RXD, 149 UART_3_TXD, 151 UART_4_RXD, 153 UART_4_TXD
part H pins: 155 USB_1_EN, 157 USB_1_OC# (power), 159 USB_1_VBUS (power), 161 USB_1_ID, 163 USB_1_D_N (power), 165 USB_1_D_P, 169 USB_2_SSTX_N, 171 USB_2_SSTX_P, 175 USB_2_SSRX_N, 177 USB_2_SSRX_P, 181 USB_2_D_N, 183 USB_2_D_P, 185 USB_2_EN, 187 USB_2_OC#
part I pins: 189 ETH_2_RGMII_INT# (power), 191 ETH_2_RGMII_MDIO, 193 ETH_2_RGMII_MDC (power), 197 ETH_2_RGMII_RXC, 199 ETH_2_RGMII_RX_CTL (power), 201 ETH_2_RGMII_RXD_0, 203 ETH_2_RGMII_RXD_1, 205 ETH_2_RGMII_RXD_2, 207 ETH_2_RGMII_RXD_3, 211 ETH_2_RGMII_TX_CTL, 213 ETH_2_RGMII_TXC, 215 ETH_2_RGMII_TXD_3, 217 ETH_2_RGMII_TXD_2, 219 ETH_2_RGMII_TXD_1, 221 ETH_2_RGMII_TXD_0
part J pins: 225 ETH_1_MDI0_P (power), 227 ETH_1_MDI0_N, 231 ETH_1_MDI1_N (power), 233 ETH_1_MDI1_P, 235 ETH_1_LED_1, 237 ETH_1_LED_2, 239 ETH_1_MDI2_P, 241 ETH_1_MDI2_N, 245 ETH_1_MDI3_N, 247 ETH_1_MDI3_P
part K pins: 10 GND, 11 GND, 18 GND, 27 GND, 28 GND, 33 GND, 39 GND, 40 GND, 45 GND, 50 GND, 51 GND, 65 GND, 68 GND, 71 GND, 77 GND, 83 GND, 86 GND, 89 GND, 97 GND, 98 GND, 103 GND, 109 GND, 110 GND, 115 GND, 121 GND, 122 GND, 127 GND, 134 GND, 145 GND, 146 GND, 158 GND, 167 GND, 170 GND, 173 GND, 179 GND, 182 GND, 194 GND, 195 GND, 204 GND, 209 GND, 223 GND, 224 GND, 229 GND, 230 GND, 236 GND, 242 GND, 243 GND, 249 VCC_BACKUP, 251 VCC, 253 VCC, 255 VCC, 257 VCC, 259 VCC
part L pins: 2 ADC_1, 4 ADC_2, 6 ADC_3, 8 ADC_4
part M pins: 12 I2C_1_SDA, 14 I2C_1_SCL
part N pins: 16 PWM_2
part O pins: 20 CAN_1_TX, 22 CAN_1_RX, 24 CAN_2_TX, 26 CAN_2_RX
part P pins: 30 I2S_1_BCLK, 32 I2S_1_SYNC, 34 I2S_1_D_OUT, 36 I2S_1_D_IN, 38 I2S_1_MCLK, 42 I2S_2_BCLK, 44 I2S_2_SYNC, 46 I2S_2_D_OUT, 48 I2S_2_D_IN
part Q pins: 52 QSPI_1_CLK, 54 QSPI_1_CS#, 56 QSPI_1_IO0, 58 QSPI_1_IO1, 60 QSPI_1_IO2, 62 QSPI_1_IO3, 64 QSPI_1_CS2#, 66 QSPI_1_DQS
part R pins: 70 SD_1_D2, 72 SD_1_D3, 74 SD_1_CMD, 76 SD_1_PWR_EN, 78 SD_1_CLK, 80 SD_1_D0, 82 SD_1_D1, 84 SD_1_CD#
part S pins: 88 MSP_1, 90 MSP_2, 92 MSP_3, 94 MSP_4, 96 MSP_5, 100 MSP_6, 102 MSP_7, 104 MSP_8, 106 MSP_9, 108 MSP_10, 112 MSP_11, 114 MSP_12, 116 MSP_13, 118 MSP_14, 120 MSP_15, 124 MSP_16, 126 MSP_17, 128 MSP_18, 130 MSP_19, 132 MSP_20, 136 MSP_21, 138 MSP_22, 140 MSP_23, 142 MSP_24, 144 MSP_25, 148 MSP_26, 150 MSP_27, 152 MSP_28, 154 MSP_29, 156 MSP_30, 160 MSP_31, 162 MSP_32, 164 MSP_33, 166 MSP_34, 168 MSP_35, 172 MSP_36, 174 MSP_37, 176 MSP_38, 178 MSP_39, 180 MSP_40, 184 MSP_41, 186 MSP_42, 188 MSP_43, 190 MSP_44, 192 MSP_45
part T pins: 196 SPI_1_CLK, 198 SPI_1_MISO, 200 SPI_1_MOSI, 202 SPI_1_CS
part U pins: 206 GPIO_1, 208 GPIO_2, 210 GPIO_3, 212 GPIO_4, 214 PWR_1V8_MOCI, 216 GPIO_5_CSI, 218 GPIO_6_CSI, 220 GPIO_7_CSI, 222 GPIO_8_CSI
part V pins: 226 PCIE_1_CLK_N, 228 PCIE_1_CLK_P, 232 PCIE_1_L0_RX_N, 234 PCIE_1_L0_RX_P, 238 PCIE_1_L0_TX_N, 240 PCIE_1_L0_TX_P, 244 PCIE_1_RESET# 
part W pins: 246 CTRL_RECOVERY_MICO#, 248 CTRL_PWR_BTN_MICO#, 250 CTRL_FORCE_OFF_MOCI#, 252 CTRL_WAKE1_MICO#, 254 CTRL_PWR_EN_MOCI, 256 CTRL_SLEEP_MOCI#, 258 CTRL_RESET_MOCI#, 260 CTRL_RESET_MICO#
1 alternate drawing of the same symbol

## CON-TerminalBlock-1x2-5.08-Mate
designator MECH?, comment Manufacturer Part No.: TB5102SW  (hidden comment: TerminalBlock-1x2-5.08-Mate)  (mechanical)
Power Connector Mate 5.08mm pitch; Manufacturer Name: AUK; No. of ways: 1x2; Pitch: 5.08mm

## CON-Tyco-826936-3-1X3-2.54mm-JP
designator JP?, comment 826936-3
Jumper, 3-Pin; Manufacturer Name: Tyco; No. of ways: 1X3; Pitch: 2.54mm; Manufacturer Part No.: 826936-3
footprint T_TYCO_826936-3 (Connector; Header; 3 Position)
pins: 1, 2, 3

## CON-Tyco-826936-5-1X5-2.54mm
designator X?, comment 826936-5
Header, 5-Pin; Manufacturer Name: Tyco; No. of ways: 1X5; Pitch: 2.54mm; Manufacturer Part No.: 826936-5
footprint T_TYCO_826936-5 (Connector, Header, 4 Position, 2.54mm pitch)
pins: 1, 2, 3, 4, 5

## CON-WURTH-629105150521
designator X?, comment 629105150521
Micro B USB-2.0, 5 Position, Surface Mount, Right Angle; Through Hole; Manufacturer Name: Wurth; No. of ways: 5; Manufacturer Part No.: 629105150521
footprint CON-Wurth-629105150521 (Micro USB 2.0 SMT Type B Horizontal 5 Contacts High Current)
pins: 1 VCC (power), 2 D-, 3 D+, 4 ID, 5 GND (power), S1 (power), S2 (power), S3 (power), S4 (power)

## CON-WURTH-629105150921
designator X?, comment 629105150921
Micro AB USB-2.0, 5 Position, Surface Mount, Right Angle; Through Hole; Manufacturer Name: Wurth; No. of ways: 5; Manufacturer Part No.: 629105150921
footprint CON-Wurth-629105150921 (Micro USB 2.0 Type AB Horizontal)
pins: 1 VCC (power), 2 D-, 3 D+, 4 ID, 5 GND (power), S1 (power), S2 (power), S3 (power), S4 (power)

## CON-Wurth-687124182122 (Mirrored)
designator X?, comment 687124182122
FFC/FPC Connector, 24 Position, Top and Bottom 0.020" (0.50mm) Surface Mount, Right Angle; Manufacturer Name: Wurth; No. of ways: 24; Pitch: 0.5mm; Manufacturer Part No.: 687124182122
footprint T_Wurth_687124182122 (Mirrored) (FPC Connector(Mirrored), 24 Position, Top and Bottom 0.020" (0.50mm) Surface Mount, Right Angle)
pins: 1, 2, 3, 4, 5, 6, 7, 8, 9, 10, 11, 12, 13, 14, 15, 16, 17, 18, 19, 20, 21, 22, 23, 24

## CON-Wurth-693012040811
designator X?, comment 693012040811
6 Contacts Mini Sim Card Holder; Manufacturer Name: Wurth; Manufacturer Part No.: 693012040811
footprint CON-Wurth-693012040811 (SIM Card Connector, Hinged Style,  6 Circuits, SMD)
pins: 1 VCC, 2 RESET, 3 CLOCK, 5 GND, 6 VPP, 7 I/O

## CON-Wurth-693063020911
designator X?, comment 693063020911
SD Card Holder; Manufacturer Name: Wurth; No. of ways: 9+2; Manufacturer Part No.: 693063020911
footprint CON-Wurth-693063020911 (SD Card Holder, 8 bit, SMD)
part A pins: 1 DAT_3 (power), 2 CMD, 3 GND, 4 VCC, 5 CLK (power), 6 GND (power), 7 DAT_0 (power), 8 DAT_1 (power), 9 DAT_2 (power), 10 CD (power), 11 WP (power)
part B pins: S1 S, S2 S, S3 S, S4 S
part B text: SHIELD

## D-BAT54-SOD523
designator D?, comment BAT54XV2T5G
Schottky Barrier Rectifier; Manufacturer Name: On Semi; Manufacturer Part No.: BAT54XV2T5G
footprint SOD-523
pins: A, C

## D-Bourns-CDSOT23-SM712
designator D?, comment CDSOT23-SM712
TVS DIODE 7V/12V 14V/26V SOT23-3; Manufacturer Name: Bourns; Manufacturer Part No.: CDSOT23-SM712
footprint SOT95P230X110-3N
pins: 1 (power), 2 (power), 3 (power)

## D-Central-BCMJ2000 TR
designator CLD?, comment CMJ2000 TR
Current Limiting Regulator High/Low-Side 2mA SOD-123FL; Manufacturer Name: Central Semiconductor Corp; Manufacturer Part No.: CMJ2000 TR
footprint SODFL350X80-2N (SODFL, 2-Leads, Body 1.60x3.50mm, IPC Medium Density)
pins: A, C

## D-Diodes-D3V3F4U10LP-7
designator D?, comment D3V3F4U10LP-7
4 CHANNEL LOW CAPACITANCE TVS DIODE ARRAY; Manufacturer Name: Diodes; Manufacturer Part No.: D3V3F4U10LP-7
footprint D-Diodes-D3V3F4U10LP-7 (U-DFN2510-10 , 10-Leads, Body 1.01x2.51mm, Pitch 0.50mm, IPC Medium Density)
pins: 1, 2, 3 (power), 4, 5, 6, 7, 8 (power), 9, 10

## D-Diodes-D5V0L1B2S9-7
designator D?, comment D5V0L1B2S9-7
BIDIRECTIONAL TVS DIODE 5V  SOD923; Manufacturer Name: Diodes; Manufacturer Part No.: D5V0L1B2S9-7
footprint D-DIODES-SOD-923 (SOD-923, 2-Leads, Body 0.60x1.00mm, IPC Medium Density)
pins: 1 C, 2 A

## D-Littelfuse-SMAJ30CA-Schottky
designator D?  Manufacturer Part No.: SMAJ30CA  (hidden comment: D-Littelfuse-SMAJ30CA-Schottky)
Bidirectional ESD protection; Manufacturer Name: Littelfuse
footprint T_LITTLEFUSE_SMAJ30CA (Bidirectional ESD protection)
pins: 1 Cathode, 2 Anode

## D-Nexperia-PESD2IVN24-T
designator D?, comment PESD2IVN24-T
TVS Array low cap; Manufacturer Name: Nexperia; Manufacturer Part No.: PESD2IVN24-T
footprint SOT95P230X110-3N
pins: 1 (power), 2 (power), 3 (power)